# Altium schematic symbol library MicroProcessor.SchLib: 9 symbols (part 1 of 4)
Pins are listed as number, name and electrical type; pins without a type are passive.

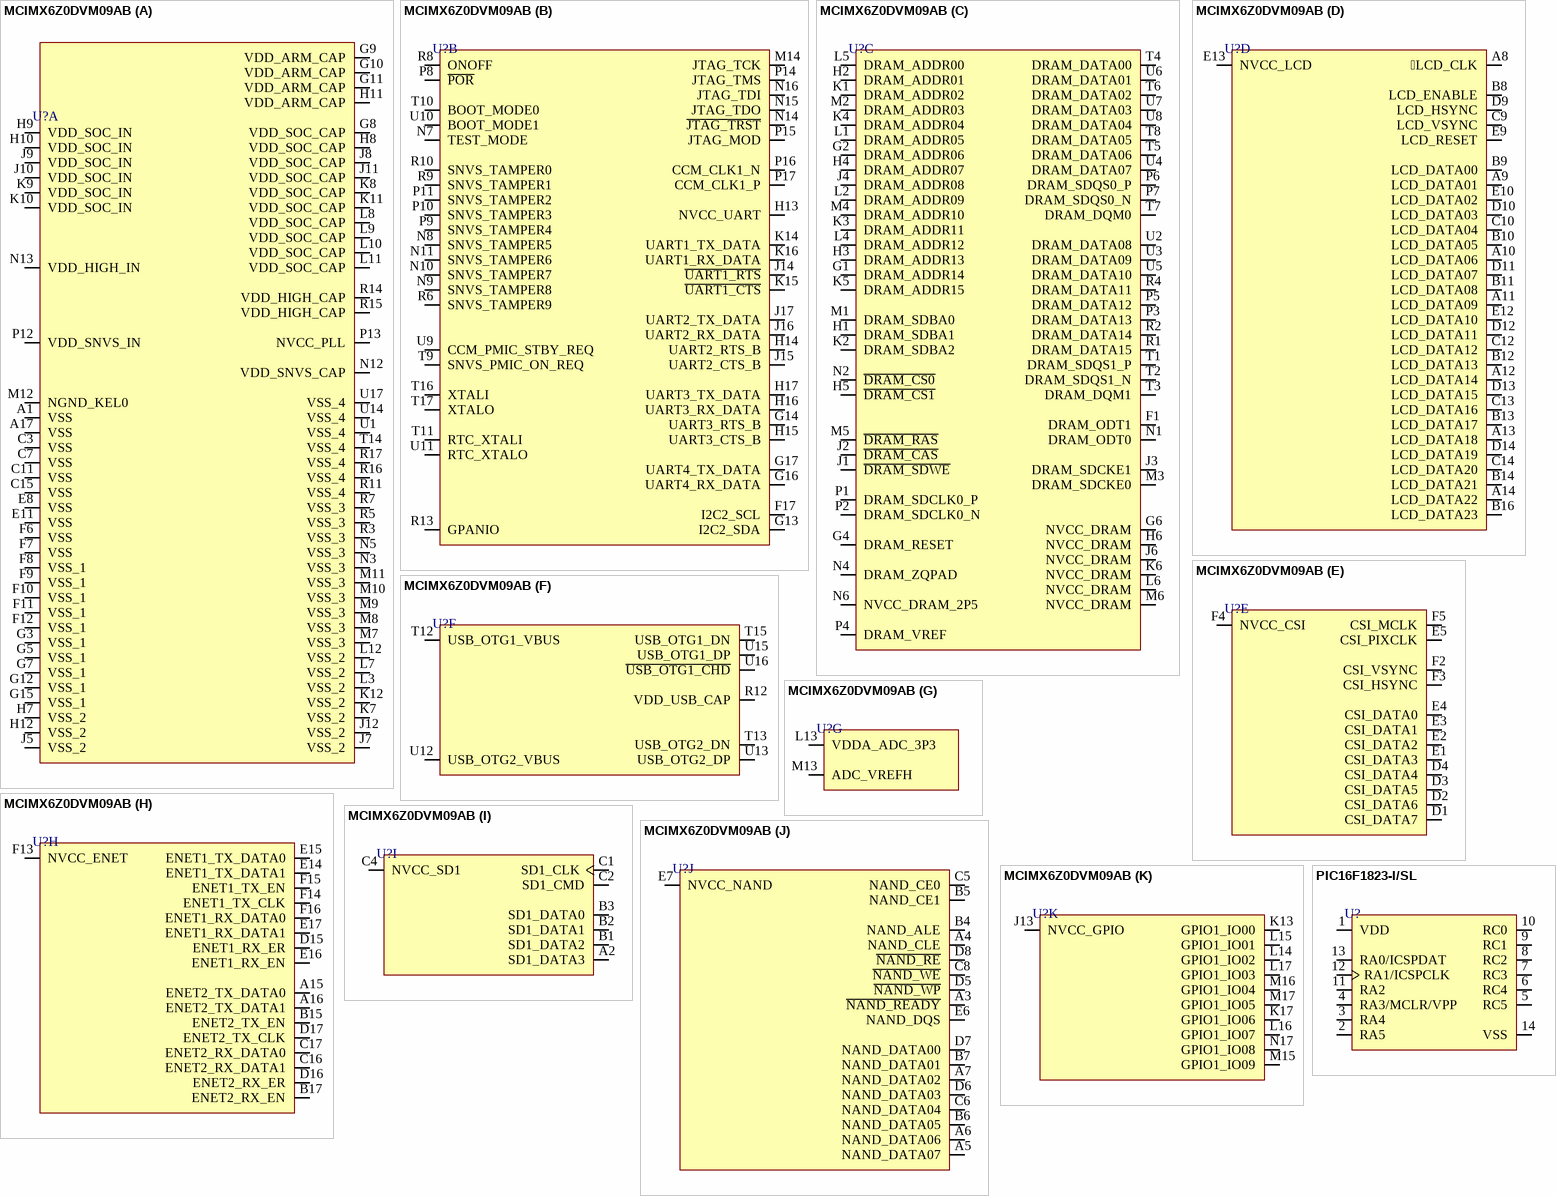
[diagram p0: symbols MCIMX6Z0DVM09AB to PIC16F1823-I/SL]

## MCIMX6Z0DVM09AB
designator U?
i.MX6ULZ, 289MAPBGA / TRAY TRAY MULTIPLE DP BAKEABLE RoHS Compliant: Yes; Manufacturer: NXP USA; Manufacturer Part Number: MCIMX6Z0DVM09AB; Core Architecture: ARM; Number of Cores: 1; Frequency: 900MHz; Supplier: Newark; Supplier Part Number: 81AC2573; RoHS: No; Category: Uncategorized; Case/Package: MAPBGA; Pins: 289; Min Operating Temperature: 0°C; Max Operating Temperature: 95°C; Packaging: Tray; ComponentLink1URL: https://www.nxp.com/docs/en/fact-sheet/IMXULZFS.pdf?src-supplier=Digi-Key; ComponentLink1Description: https://www.nxp.com/docs/en/fact-sheet/IMXULZFS.pdf?src-supplier=Digi-Key
footprint 289-MAPBGA (14x14)
part A pins: A1 VSS (power), A17 VSS (power), C3 VSS (power), C7 VSS (power), C11 VSS (power), C15 VSS (power), E8 VSS (power), E11 VSS (power), F6 VSS (power), F7 VSS (power), F8 VSS_1 (power), F9 VSS_1 (power), F10 VSS_1 (power), F11 VSS_1 (power), F12 VSS_1 (power), G3 VSS_1 (power), G5 VSS_1 (power), G7 VSS_1 (power), G8 VDD_SOC_CAP (power), G9 VDD_ARM_CAP (power), G10 VDD_ARM_CAP (power), G11 VDD_ARM_CAP (power), G12 VSS_1 (power), G15 VSS_1 (power), H7 VSS_2 (power), H8 VDD_SOC_CAP (power), H9 VDD_SOC_IN (power), H10 VDD_SOC_IN (power), H11 VDD_ARM_CAP (power), H12 VSS_2 (power), J5 VSS_2 (power), J7 VSS_2 (power), J8 VDD_SOC_CAP (power), J9 VDD_SOC_IN (power), J10 VDD_SOC_IN (power), J11 VDD_SOC_CAP (power), J12 VSS_2 (power), K7 VSS_2 (power), K8 VDD_SOC_CAP (power), K9 VDD_SOC_IN (power), K10 VDD_SOC_IN (power), K11 VDD_SOC_CAP (power), K12 VSS_2 (power), L3 VSS_2 (power), L7 VSS_2 (power), L8 VDD_SOC_CAP (power), L9 VDD_SOC_CAP (power), L10 VDD_SOC_CAP (power), L11 VDD_SOC_CAP (power), L12 VSS_2 (power), M7 VSS_3 (power), M8 VSS_3 (power), M9 VSS_3 (power), M10 VSS_3 (power), M11 VSS_3 (power), M12 NGND_KEL0, N3 VSS_3 (power), N5 VSS_3 (power), N12 VDD_SNVS_CAP (power), N13 VDD_HIGH_IN (power), P12 VDD_SNVS_IN (power), P13 NVCC_PLL, R3 VSS_3 (power), R5 VSS_3 (power), R7 VSS_3 (power), R11 VSS_4 (power), R14 VDD_HIGH_CAP (power), R15 VDD_HIGH_CAP (power), R16 VSS_4 (power), R17 VSS_4 (power), T14 VSS_4 (power), U1 VSS_4 (power), U14 VSS_4 (power), U17 VSS_4 (power)
part B pins: F17 I2C2_SCL, G13 I2C2_SDA, G14 UART3_RTS_B, G16 UART4_RX_DATA, G17 UART4_TX_DATA, H13 NVCC_UART, H14 UART2_RTS_B, H15 UART3_CTS_B, H16 UART3_RX_DATA, H17 UART3_TX_DATA, J14 ~{UART1_RTS}, J15 UART2_CTS_B, J16 UART2_RX_DATA, J17 UART2_TX_DATA, K14 UART1_TX_DATA, K15 ~{UART1_CTS}, K16 UART1_RX_DATA, M14 JTAG_TCK, N7 TEST_MODE, N8 SNVS_TAMPER5, N9 SNVS_TAMPER8, N10 SNVS_TAMPER7, N11 SNVS_TAMPER6, N14 ~{JTAG_TRST}, N15 JTAG_TDO, N16 JTAG_TDI, P8 ~{POR}, P9 SNVS_TAMPER4, P10 SNVS_TAMPER3, P11 SNVS_TAMPER2, P14 JTAG_TMS, P15 JTAG_MOD, P16 CCM_CLK1_N, P17 CCM_CLK1_P, R6 SNVS_TAMPER9, R8 ONOFF, R9 SNVS_TAMPER1, R10 SNVS_TAMPER0, R13 GPANIO, T9 SNVS_PMIC_ON_REQ, T10 BOOT_MODE0, T11 RTC_XTALI, T16 XTALI, T17 XTALO, U9 CCM_PMIC_STBY_REQ, U10 BOOT_MODE1, U11 RTC_XTALO
part C pins: F1 DRAM_ODT1, G1 DRAM_ADDR14, G2 DRAM_ADDR06, G4 DRAM_RESET, G6 NVCC_DRAM, H1 DRAM_SDBA1, H2 DRAM_ADDR01, H3 DRAM_ADDR13, H4 DRAM_ADDR07, H5 ~{DRAM_CS1}, H6 NVCC_DRAM, J1 ~{DRAM_SDWE}, J2 ~{DRAM_CAS}, J3 DRAM_SDCKE1, J4 DRAM_ADDR08, J6 NVCC_DRAM, K1 DRAM_ADDR02, K2 DRAM_SDBA2, K3 DRAM_ADDR11, K4 DRAM_ADDR04, K5 DRAM_ADDR15, K6 NVCC_DRAM, L1 DRAM_ADDR05, L2 DRAM_ADDR09, L4 DRAM_ADDR12, L5 DRAM_ADDR00, L6 NVCC_DRAM, M1 DRAM_SDBA0, M2 DRAM_ADDR03, M3 DRAM_SDCKE0, M4 DRAM_ADDR10, M5 ~{DRAM_RAS}, M6 NVCC_DRAM, N1 DRAM_ODT0, N2 ~{DRAM_CS0}, N4 DRAM_ZQPAD, N6 NVCC_DRAM_2P5, P1 DRAM_SDCLK0_P, P2 DRAM_SDCLK0_N, P3 DRAM_DATA13, P4 DRAM_VREF, P5 DRAM_DATA12, P6 DRAM_SDQS0_P, P7 DRAM_SDQS0_N, R1 DRAM_DATA15, R2 DRAM_DATA14, R4 DRAM_DATA11, T1 DRAM_SDQS1_P, T2 DRAM_SDQS1_N, T3 DRAM_DQM1, T4 DRAM_DATA00, T5 DRAM_DATA06, T6 DRAM_DATA02, T7 DRAM_DQM0, T8 DRAM_DATA05, U2 DRAM_DATA08, U3 DRAM_DATA09, U4 DRAM_DATA07, U5 DRAM_DATA10, U6 DRAM_DATA01, U7 DRAM_DATA03, U8 DRAM_DATA04
part D pins: A8 LCD_CLK, A9 LCD_DATA01, A10 LCD_DATA06, A11 LCD_DATA09, A12 LCD_DATA14, A13 LCD_DATA18, A14 LCD_DATA22, B8 LCD_ENABLE, B9 LCD_DATA00, B10 LCD_DATA05, B11 LCD_DATA08, B12 LCD_DATA13, B13 LCD_DATA17, B14 LCD_DATA21, B16 LCD_DATA23, C9 LCD_VSYNC, C10 LCD_DATA04, C12 LCD_DATA12, C13 LCD_DATA16, C14 LCD_DATA20, D9 LCD_HSYNC, D10 LCD_DATA03, D11 LCD_DATA07, D12 LCD_DATA11, D13 LCD_DATA15, D14 LCD_DATA19, E9 LCD_RESET, E10 LCD_DATA02, E12 LCD_DATA10, E13 NVCC_LCD
part E pins: D1 CSI_DATA7, D2 CSI_DATA6, D3 CSI_DATA5, D4 CSI_DATA4, E1 CSI_DATA3, E2 CSI_DATA2, E3 CSI_DATA1, E4 CSI_DATA0, E5 CSI_PIXCLK, F2 CSI_VSYNC, F3 CSI_HSYNC, F4 NVCC_CSI, F5 CSI_MCLK
part F pins: R12 VDD_USB_CAP (power), T12 USB_OTG1_VBUS, T13 USB_OTG2_DN, T15 USB_OTG1_DN, U12 USB_OTG2_VBUS, U13 USB_OTG2_DP, U15 USB_OTG1_DP, U16 ~{USB_OTG1_CHD}
part G pins: L13 VDDA_ADC_3P3 (power), M13 ADC_VREFH (power)
part H pins: A15 ENET2_TX_DATA0, A16 ENET2_TX_DATA1, B15 ENET2_TX_EN, B17 ENET2_RX_EN, C16 ENET2_RX_DATA1, C17 ENET2_RX_DATA0, D15 ENET1_RX_ER, D16 ENET2_RX_ER, D17 ENET2_TX_CLK, E14 ENET1_TX_DATA1, E15 ENET1_TX_DATA0, E16 ENET1_RX_EN, E17 ENET1_RX_DATA1, F13 NVCC_ENET, F14 ENET1_TX_CLK, F15 ENET1_TX_EN, F16 ENET1_RX_DATA0
part I pins: A2 SD1_DATA3, B1 SD1_DATA2, B2 SD1_DATA1, B3 SD1_DATA0, C1 SD1_CLK, C2 SD1_CMD, C4 NVCC_SD1
part J pins: A3 ~{NAND_READY}, A4 NAND_CLE, A5 NAND_DATA07, A6 NAND_DATA06, A7 NAND_DATA02, B4 NAND_ALE, B5 NAND_CE1, B6 NAND_DATA05, B7 NAND_DATA01, C5 NAND_CE0, C6 NAND_DATA04, C8 ~{NAND_WE}, D5 ~{NAND_WP}, D6 NAND_DATA03, D7 NAND_DATA00, D8 ~{NAND_RE}, E6 NAND_DQS, E7 NVCC_NAND
part K pins: J13 NVCC_GPIO, K13 GPIO1_IO00, K17 GPIO1_IO06, L14 GPIO1_IO02, L15 GPIO1_IO01, L16 GPIO1_IO07, L17 GPIO1_IO03, M15 GPIO1_IO09, M16 GPIO1_IO04, M17 GPIO1_IO05, N17 GPIO1_IO08

## PIC16F1823-I/SL
designator U?
IC MCU 8BIT 3.5KB FLASH 14SOIC; Manufacturer: Microchip; Manufacturer Part Number: PIC16F1823-I/SL; Item Type: Microprocessors; Supplier: Digikey; Supplier Part Number: PIC16F1823-I/SL-ND; RoHS: Yes; Stock: 47700; Pricing: 1=1.4, 25=1.28, 100=1.18 (USD); ComponentLink1URL: https://datasheet.ciiva.com/22671/1645109-22671365.pdf?src-supplier=Element14; ComponentLink1Description: https://datasheet.ciiva.com/22671/1645109-22671365.pdf?src-supplier=Element14; ComponentLink2URL: https://datasheet.ciiva.com/14132/pic12f1822-16f1823-eng-tds-14132380.pdf?src-supplier=Distrelec; ComponentLink2Description: https://datasheet.ciiva.com/14132/pic12f1822-16f1823-eng-tds-14132380.pdf?src-supplier=Distrelec; ComponentLink3URL: https://datasheet.ciiva.com/6641/41413c-6641949.pdf?src-supplier=Digikey; ComponentLink3Description: https://datasheet.ciiva.com/6641/41413c-6641949.pdf?src-supplier=Digikey; ComponentLink4URL: https://datasheet.ciiva.com/9229/41414d-9229034.pdf?src-supplier=Avnet; ComponentLink4Description: https://datasheet.ciiva.com/9229/41414d-9229034.pdf?src-supplier=Avnet; ComponentLink5URL: https://datasheet.ciiva.com/29331/651599-da-01-en-ic-mcu-pic16f1823-i-sl-soic-14-mcp-29331420.pdf?src-supplier=Conrad; ComponentLink5Description: https://datasheet.ciiva.com/29331/651599-da-01-en-ic-mcu-pic16f1823-i-sl-soic-14-mcp-29331420.pdf?src-supplier=Conrad
footprint SOIC-14
pins: 1 VDD, 2 RA5, 3 RA4, 4 RA3/MCLR/VPP, 5 RC5, 6 RC4, 7 RC3, 8 RC2, 9 RC1, 10 RC0, 11 RA2, 12 RA1/ICSPCLK, 13 RA0/ICSPDAT, 14 VSS

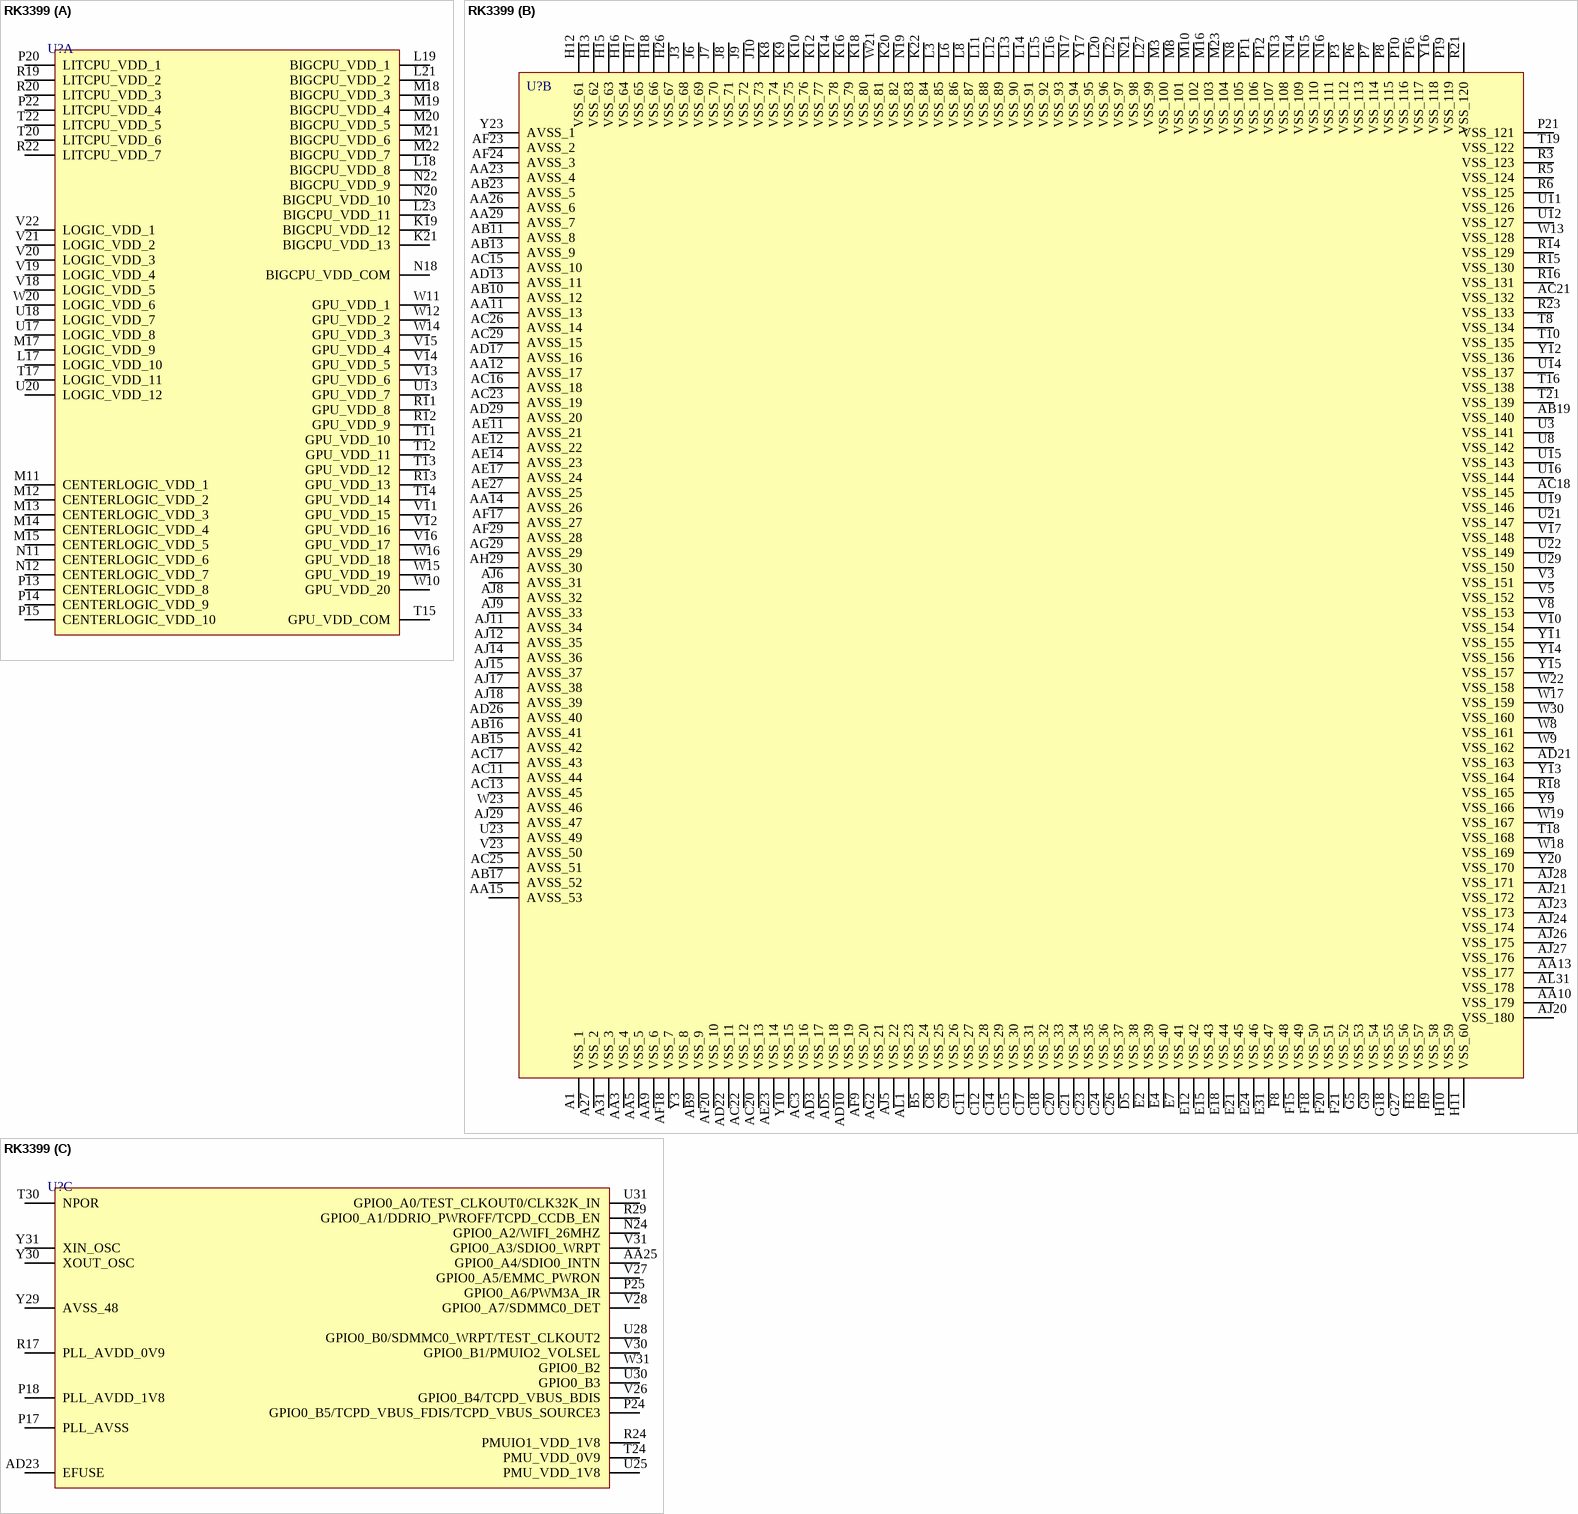
[diagram p1: symbol RK3399]

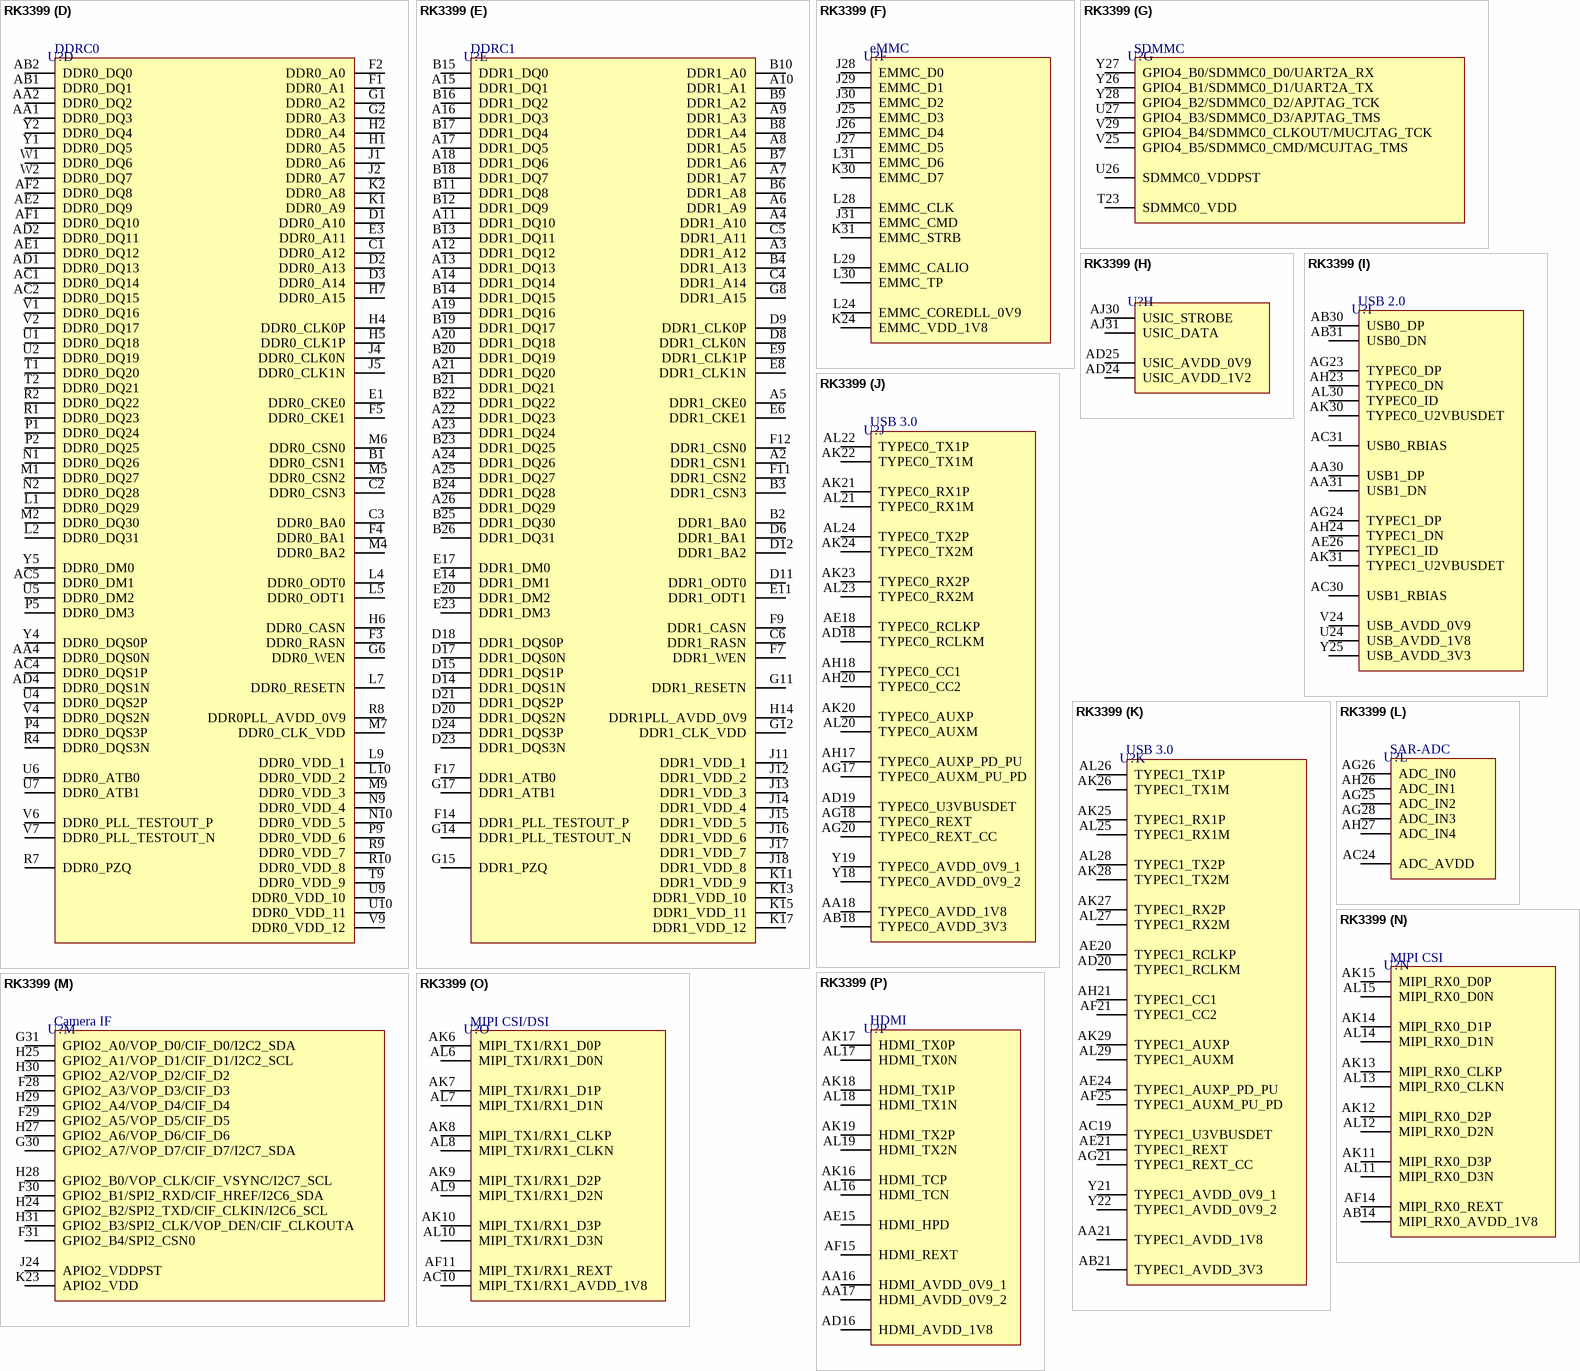
[diagram p2: symbol RK3399]

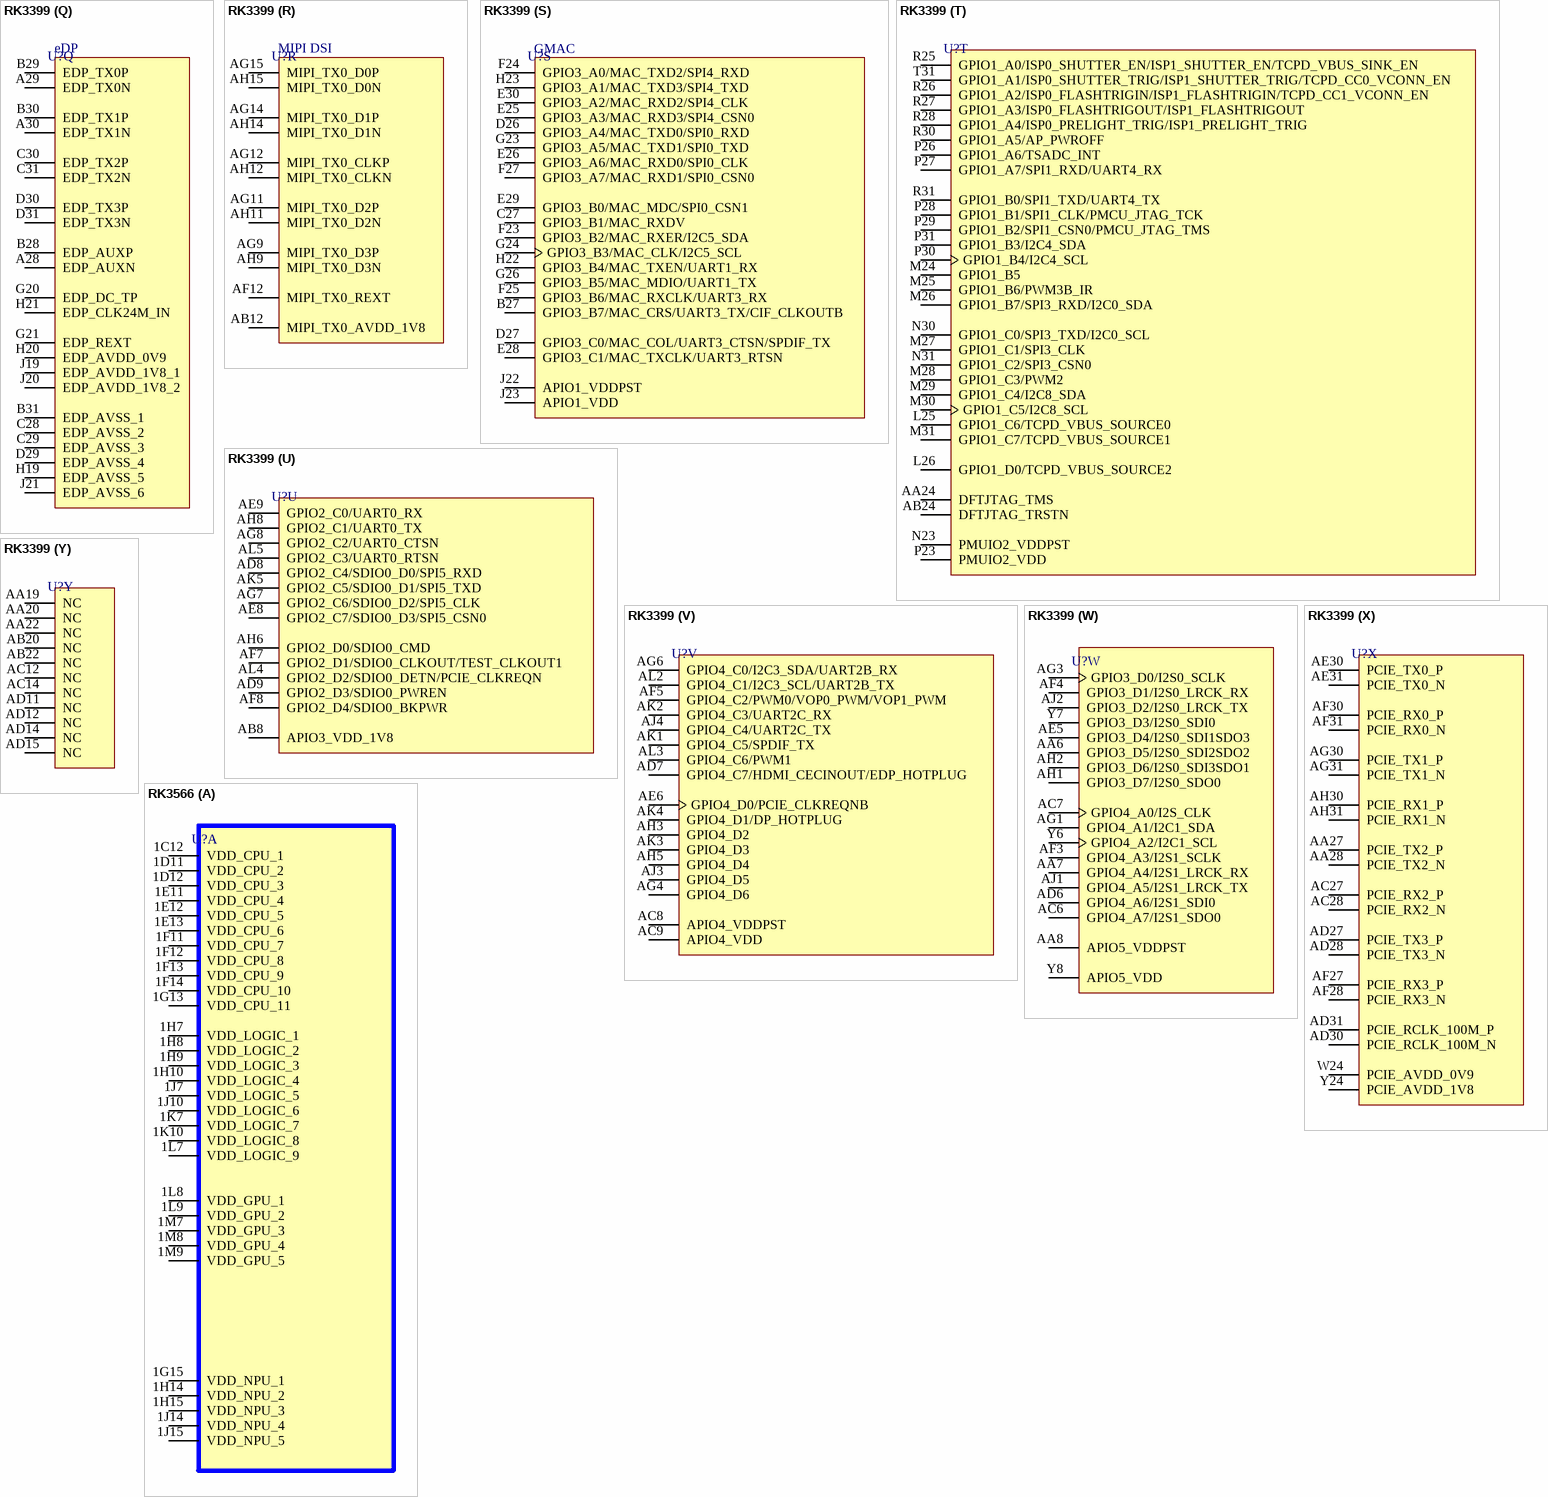
[diagram p3: symbols RK3399 to RK3566]

## RK3399
designator U?
RK3399 CPU BGA for HD set-top box chip BGA Chipset; Manufacturer: Fuzhou Rockchip Electronics; ComponentLink1Description: Aliexpress; ComponentLink1URL: https://www.aliexpress.com/item/1005001971093459.html?spm=a2g0n.productlist.0.0.3c7csv8Qsv8Quh&browser_id=3ac7e9efb8074641aaabc4d871f09748&aff_trace_key=&aff_platform=msite&m_page_id=181389a08711fc2600d8cc522bab8d702dd4189be0&gclid=&pdp_npi=2%40dis%21USD%21%2123.6%21%21%21%21%21%402101d91e16545120399167831e8b89%21%21sea&algo_pvid=4303aedd-774c-4013-953d-920f10b55003; Manufacturer Part Number: RK3399; Footprint: FCBGA828
footprint FCBGA828 (21x21)
part A pins: K19 BIGCPU_VDD_12, K21 BIGCPU_VDD_13, L17 LOGIC_VDD_10 (power), L18 BIGCPU_VDD_8, L19 BIGCPU_VDD_1, L21 BIGCPU_VDD_2, L23 BIGCPU_VDD_11, M11 CENTERLOGIC_VDD_1 (power), M12 CENTERLOGIC_VDD_2 (power), M13 CENTERLOGIC_VDD_3 (power), M14 CENTERLOGIC_VDD_4 (power), M15 CENTERLOGIC_VDD_5 (power), M17 LOGIC_VDD_9 (power), M18 BIGCPU_VDD_3, M19 BIGCPU_VDD_4, M20 BIGCPU_VDD_5, M21 BIGCPU_VDD_6, M22 BIGCPU_VDD_7, N11 CENTERLOGIC_VDD_6 (power), N12 CENTERLOGIC_VDD_7 (power), N18 BIGCPU_VDD_COM, N20 BIGCPU_VDD_10, N22 BIGCPU_VDD_9, P13 CENTERLOGIC_VDD_8 (power), P14 CENTERLOGIC_VDD_9 (power), P15 CENTERLOGIC_VDD_10 (power), P20 LITCPU_VDD_1 (power), P22 LITCPU_VDD_4 (power), R11 GPU_VDD_8, R12 GPU_VDD_9, R13 GPU_VDD_13, R19 LITCPU_VDD_2 (power), R20 LITCPU_VDD_3 (power), R22 LITCPU_VDD_7 (power), T11 GPU_VDD_10, T12 GPU_VDD_11, T13 GPU_VDD_12, T14 GPU_VDD_14, T15 GPU_VDD_COM, T17 LOGIC_VDD_11 (power), T20 LITCPU_VDD_6 (power), T22 LITCPU_VDD_5 (power), U13 GPU_VDD_7, U17 LOGIC_VDD_8 (power), U18 LOGIC_VDD_7 (power), U20 LOGIC_VDD_12 (power), V11 GPU_VDD_15, V12 GPU_VDD_16, V13 GPU_VDD_6, V14 GPU_VDD_5, V15 GPU_VDD_4, V16 GPU_VDD_17, V18 LOGIC_VDD_5 (power), V19 LOGIC_VDD_4 (power), V20 LOGIC_VDD_3 (power), V21 LOGIC_VDD_2 (power), V22 LOGIC_VDD_1 (power), W10 GPU_VDD_20, W11 GPU_VDD_1, W12 GPU_VDD_2, W14 GPU_VDD_3, W15 GPU_VDD_19, W16 GPU_VDD_18, W20 LOGIC_VDD_6 (power)
part B pins: A1 VSS_1 (power), A27 VSS_2 (power), A31 VSS_3 (power), AA3 VSS_4 (power), AA5 VSS_5 (power), AA9 VSS_6 (power), AA10 VSS_179 (power), AA11 AVSS_13, AA12 AVSS_17, AA13 VSS_177 (power), AA14 AVSS_26, AA15 AVSS_53, AA23 AVSS_4, AA26 AVSS_6, AA29 AVSS_7, AB9 VSS_9 (power), AB10 AVSS_12, AB11 AVSS_8, AB13 AVSS_9, AB15 AVSS_42, AB16 AVSS_41, AB17 AVSS_52, AB19 VSS_140 (power), AB23 AVSS_5, AC3 VSS_16 (power), AC11 AVSS_44, AC13 AVSS_45, AC15 AVSS_10, AC16 AVSS_18, AC17 AVSS_43, AC18 VSS_145 (power), AC20 VSS_13 (power), AC21 VSS_132 (power), AC22 VSS_12 (power), AC23 AVSS_19, AC25 AVSS_51, AC26 AVSS_14, AC29 AVSS_15, AD3 VSS_17 (power), AD5 VSS_18 (power), AD10 VSS_19 (power), AD13 AVSS_11, AD17 AVSS_16, AD21 VSS_163 (power), AD22 VSS_11 (power), AD26 AVSS_40, AD29 AVSS_20, AE11 AVSS_21, AE12 AVSS_22, AE14 AVSS_23, AE17 AVSS_24, AE23 VSS_14 (power), AE27 AVSS_25, AF9 VSS_20 (power), AF17 AVSS_27, AF18 VSS_7 (power), AF20 VSS_10 (power), AF23 AVSS_2, AF24 AVSS_3, AF29 AVSS_28, AG2 VSS_21 (power), AG29 AVSS_29, AH29 AVSS_30, AJ5 VSS_22 (power), AJ6 AVSS_31, AJ8 AVSS_32, AJ9 AVSS_33, AJ11 AVSS_34, AJ12 AVSS_35, AJ14 AVSS_36, AJ15 AVSS_37, AJ17 AVSS_38, AJ18 AVSS_39, AJ20 VSS_180 (power), AJ21 VSS_172 (power), AJ23 VSS_173 (power), AJ24 VSS_174 (power), AJ26 VSS_175 (power), AJ27 VSS_176 (power), AJ28 VSS_171 (power), AJ29 AVSS_47, AL1 VSS_23 (power), AL31 VSS_178 (power), B5 VSS_24 (power), C8 VSS_25 (power), C9 VSS_26 (power), C11 VSS_27 (power), C12 VSS_28 (power), C14 VSS_29 (power), C15 VSS_30 (power), C17 VSS_31 (power), C18 VSS_32 (power), C20 VSS_33 (power), C21 VSS_34 (power), C23 VSS_35 (power), C24 VSS_36 (power), C26 VSS_37 (power), D5 VSS_38 (power), E2 VSS_39 (power), E4 VSS_40 (power), E7 VSS_41 (power), E12 VSS_42 (power), E15 VSS_43 (power), E18 VSS_44 (power), E21 VSS_45 (power), E24 VSS_46 (power), E31 VSS_47 (power), F8 VSS_48 (power), F15 VSS_49 (power), F18 VSS_50 (power), F20 VSS_51 (power), F21 VSS_52 (power), G5 VSS_53 (power), G9 VSS_54 (power), G18 VSS_55 (power), G27 VSS_56 (power), H3 VSS_57 (power), H9 VSS_58 (power), H10 VSS_59 (power), H11 VSS_60 (power), H12 VSS_61 (power), H13 VSS_62 (power), H15 VSS_63 (power), H16 VSS_64 (power), H17 VSS_65 (power), H18 VSS_66 (power), H26 VSS_67 (power), J3 VSS_68 (power), J6 VSS_69 (power), J7 VSS_70 (power), J8 VSS_71 (power), J9 VSS_72 (power), J10 VSS_73 (power), K8 VSS_74 (power), K9 VSS_75 (power), K10 VSS_76 (power), K12 VSS_77 (power), K14 VSS_78 (power), K16 VSS_79 (power), K18 VSS_80 (power), K20 VSS_82 (power), K22 VSS_84 (power), L3 VSS_85 (power), L6 VSS_86 (power), L8 VSS_87 (power), L11 VSS_88 (power), L12 VSS_89 (power), L13 VSS_90 (power), L14 VSS_91 (power), L15 VSS_92 (power), L16 VSS_93 (power), L20 VSS_96 (power), L22 VSS_97 (power), L27 VSS_99 (power), M3 VSS_100 (power), M8 VSS_101 (power), M10 VSS_102 (power), M16 VSS_103 (power), M23 VSS_104 (power), N8 VSS_105 (power), N13 VSS_108 (power), N14 VSS_109 (power), N15 VSS_110 (power), N16 VSS_111 (power), N17 VSS_94 (power), N19 VSS_83 (power), N21 VSS_98 (power), P3 VSS_112 (power), P6 VSS_113 (power), P7 VSS_114 (power), P8 VSS_115 (power), P10 VSS_116 (power), P11 VSS_106 (power), P12 VSS_107 (power), P16 VSS_117 (power), P19 VSS_119 (power), P21 VSS_121 (power), R3 VSS_123 (power), R5 VSS_124 (power), R6 VSS_125 (power), R14 VSS_129 (power), R15 VSS_130 (power), R16 VSS_131 (power), R18 VSS_165 (power), R21 VSS_120 (power), R23 VSS_133 (power), T8 VSS_134 (power), T10 VSS_135 (power), T16 VSS_138 (power), T18 VSS_168 (power), T19 VSS_122 (power), T21 VSS_139 (power), U3 VSS_141 (power), U8 VSS_142 (power), U11 VSS_126 (power), U12 VSS_127 (power), U14 VSS_137 (power), U15 VSS_143 (power), U16 VSS_144 (power), U19 VSS_146 (power), U21 VSS_147 (power), U22 VSS_149 (power), U23 AVSS_49, U29 VSS_150 (power), V3 VSS_151 (power), V5 VSS_152 (power), V8 VSS_153 (power), V10 VSS_154 (power), V17 VSS_148 (power), V23 AVSS_50, W8 VSS_161 (power), W9 VSS_162 (power), W13 VSS_128 (power), W17 VSS_159 (power), W18 VSS_169 (power), W19 VSS_167 (power), W21 VSS_81 (power), W22 VSS_158 (power), W23 AVSS_46, W30 VSS_160 (power), Y3 VSS_8 (power), Y9 VSS_166 (power), Y10 VSS_15 (power), Y11 VSS_155 (power), Y12 VSS_136 (power), Y13 VSS_164 (power), Y14 VSS_156 (power), Y15 VSS_157 (power), Y16 VSS_118 (power), Y17 VSS_95 (power), Y20 VSS_170 (power), Y23 AVSS_1
part C pins: AA25 GPIO0_A4/SDIO0_INTN, AD23 EFUSE, N24 GPIO0_A2/WIFI_26MHZ, P17 PLL_AVSS, P18 PLL_AVDD_1V8, P24 GPIO0_B5/TCPD_VBUS_FDIS/TCPD_VBUS_SOURCE3, P25 GPIO0_A6/PWM3A_IR, R17 PLL_AVDD_0V9, R24 PMUIO1_VDD_1V8, R29 GPIO0_A1/DDRIO_PWROFF/TCPD_CCDB_EN, T24 PMU_VDD_0V9, T30 NPOR, U25 PMU_VDD_1V8, U28 GPIO0_B0/SDMMC0_WRPT/TEST_CLKOUT2, U30 GPIO0_B3, U31 GPIO0_A0/TEST_CLKOUT0/CLK32K_IN, V26 GPIO0_B4/TCPD_VBUS_BDIS, V27 GPIO0_A5/EMMC_PWRON, V28 GPIO0_A7/SDMMC0_DET, V30 GPIO0_B1/PMUIO2_VOLSEL, V31 GPIO0_A3/SDIO0_WRPT, W31 GPIO0_B2, Y29 AVSS_48, Y30 XOUT_OSC, Y31 XIN_OSC
part D pins: AA1 DDR0_DQ3, AA2 DDR0_DQ2, AA4 DDR0_DQS0N, AB1 DDR0_DQ1, AB2 DDR0_DQ0, AC1 DDR0_DQ14, AC2 DDR0_DQ15, AC4 DDR0_DQS1P, AC5 DDR0_DM1, AD1 DDR0_DQ13, AD2 DDR0_DQ11, AD4 DDR0_DQS1N, AE1 DDR0_DQ12, AE2 DDR0_DQ9, AF1 DDR0_DQ10, AF2 DDR0_DQ8, B1 DDR0_CSN1, C1 DDR0_A12, C2 DDR0_CSN3, C3 DDR0_BA0, D1 DDR0_A10, D2 DDR0_A13, D3 DDR0_A14, E1 DDR0_CKE0, E3 DDR0_A11, F1 DDR0_A1, F2 DDR0_A0, F3 DDR0_RASN, F4 DDR0_BA1, F5 DDR0_CKE1, G1 DDR0_A2, G2 DDR0_A3, G6 DDR0_WEN, H1 DDR0_A5, H2 DDR0_A4, H4 DDR0_CLK0P, H5 DDR0_CLK1P, H6 DDR0_CASN, H7 DDR0_A15, J1 DDR0_A6, J2 DDR0_A7, J4 DDR0_CLK0N, J5 DDR0_CLK1N, K1 DDR0_A9, K2 DDR0_A8, L1 DDR0_DQ29, L2 DDR0_DQ31, L4 DDR0_ODT0, L5 DDR0_ODT1, L7 DDR0_RESETN, L9 DDR0_VDD_1, L10 DDR0_VDD_2, M1 DDR0_DQ27, M2 DDR0_DQ30, M4 DDR0_BA2, M5 DDR0_CSN2, M6 DDR0_CSN0, M7 DDR0_CLK_VDD, M9 DDR0_VDD_3, N1 DDR0_DQ26, N2 DDR0_DQ28, N9 DDR0_VDD_4, N10 DDR0_VDD_5, P1 DDR0_DQ24, P2 DDR0_DQ25, P4 DDR0_DQS3P, P5 DDR0_DM3, P9 DDR0_VDD_6, R1 DDR0_DQ23, R2 DDR0_DQ22, R4 DDR0_DQS3N, R7 DDR0_PZQ, R8 DDR0PLL_AVDD_0V9, R9 DDR0_VDD_7, R10 DDR0_VDD_8, T1 DDR0_DQ20, T2 DDR0_DQ21, T9 DDR0_VDD_9, U1 DDR0_DQ18, U2 DDR0_DQ19, U4 DDR0_DQS2P, U5 DDR0_DM2, U6 DDR0_ATB0, U7 DDR0_ATB1, U9 DDR0_VDD_10, U10 DDR0_VDD_11, V1 DDR0_DQ16, V2 DDR0_DQ17, V4 DDR0_DQS2N, V6 DDR0_PLL_TESTOUT_P, V7 DDR0_PLL_TESTOUT_N, V9 DDR0_VDD_12, W1 DDR0_DQ6, W2 DDR0_DQ7, Y1 DDR0_DQ5, Y2 DDR0_DQ4, Y4 DDR0_DQS0P, Y5 DDR0_DM0
part E pins: A2 DDR1_CSN1, A3 DDR1_A12, A4 DDR1_A10, A5 DDR1_CKE0, A6 DDR1_A9, A7 DDR1_A7, A8 DDR1_A5, A9 DDR1_A3, A10 DDR1_A1, A11 DDR1_DQ10, A12 DDR1_DQ12, A13 DDR1_DQ13, A14 DDR1_DQ14, A15 DDR1_DQ1, A16 DDR1_DQ3, A17 DDR1_DQ5, A18 DDR1_DQ6, A19 DDR1_DQ16, A20 DDR1_DQ18, A21 DDR1_DQ20, A22 DDR1_DQ23, A23 DDR1_DQ24, A24 DDR1_DQ26, A25 DDR1_DQ27, A26 DDR1_DQ29, B2 DDR1_BA0, B3 DDR1_CSN3, B4 DDR1_A13, B6 DDR1_A8, B7 DDR1_A6, B8 DDR1_A4, B9 DDR1_A2, B10 DDR1_A0, B11 DDR1_DQ8, B12 DDR1_DQ9, B13 DDR1_DQ11, B14 DDR1_DQ15, B15 DDR1_DQ0, B16 DDR1_DQ2, B17 DDR1_DQ4, B18 DDR1_DQ7, B19 DDR1_DQ17, B20 DDR1_DQ19, B21 DDR1_DQ21, B22 DDR1_DQ22, B23 DDR1_DQ25, B24 DDR1_DQ28, B25 DDR1_DQ30, B26 DDR1_DQ31, C4 DDR1_A14, C5 DDR1_A11, C6 DDR1_RASN, D6 DDR1_BA1, D8 DDR1_CLK0N, D9 DDR1_CLK0P, D11 DDR1_ODT0, D12 DDR1_BA2, D14 DDR1_DQS1N, D15 DDR1_DQS1P, D17 DDR1_DQS0N, D18 DDR1_DQS0P, D20 DDR1_DQS2N, D21 DDR1_DQS2P, D23 DDR1_DQS3N, D24 DDR1_DQS3P, E6 DDR1_CKE1, E8 DDR1_CLK1N, E9 DDR1_CLK1P, E11 DDR1_ODT1, E14 DDR1_DM1, E17 DDR1_DM0, E20 DDR1_DM2, E23 DDR1_DM3, F7 DDR1_WEN, F9 DDR1_CASN, F11 DDR1_CSN2, F12 DDR1_CSN0, F14 DDR1_PLL_TESTOUT_P, F17 DDR1_ATB0, G8 DDR1_A15, G11 DDR1_RESETN, G12 DDR1_CLK_VDD, G14 DDR1_PLL_TESTOUT_N, G15 DDR1_PZQ, G17 DDR1_ATB1, H14 DDR1PLL_AVDD_0V9, J11 DDR1_VDD_1, J12 DDR1_VDD_2, J13 DDR1_VDD_3, J14 DDR1_VDD_4, J15 DDR1_VDD_5, J16 DDR1_VDD_6, J17 DDR1_VDD_7, J18 DDR1_VDD_8, K11 DDR1_VDD_9, K13 DDR1_VDD_10, K15 DDR1_VDD_11, K17 DDR1_VDD_12
part F pins: J25 EMMC_D3, J26 EMMC_D4, J27 EMMC_D5, J28 EMMC_D0, J29 EMMC_D1, J30 EMMC_D2, J31 EMMC_CMD, K24 EMMC_VDD_1V8, K30 EMMC_D7, K31 EMMC_STRB, L24 EMMC_COREDLL_0V9, L28 EMMC_CLK, L29 EMMC_CALIO, L30 EMMC_TP, L31 EMMC_D6
part G pins: T23 SDMMC0_VDD, U26 SDMMC0_VDDPST, U27 GPIO4_B3/SDMMC0_D3/APJTAG_TMS, V25 GPIO4_B5/SDMMC0_CMD/MCUJTAG_TMS, V29 GPIO4_B4/SDMMC0_CLKOUT/MUCJTAG_TCK, Y26 GPIO4_B1/SDMMC0_D1/UART2A_TX, Y27 GPIO4_B0/SDMMC0_D0/UART2A_RX, Y28 GPIO4_B2/SDMMC0_D2/APJTAG_TCK
part H pins: AD24 USIC_AVDD_1V2, AD25 USIC_AVDD_0V9, AJ30 USIC_STROBE, AJ31 USIC_DATA
part I pins: AA30 USB1_DP, AA31 USB1_DN, AB30 USB0_DP, AB31 USB0_DN, AC30 USB1_RBIAS, AC31 USB0_RBIAS, AE26 TYPEC1_ID, AG23 TYPEC0_DP, AG24 TYPEC1_DP, AH23 TYPEC0_DN, AH24 TYPEC1_DN, AK30 TYPEC0_U2VBUSDET, AK31 TYPEC1_U2VBUSDET, AL30 TYPEC0_ID, U24 USB_AVDD_1V8, V24 USB_AVDD_0V9, Y25 USB_AVDD_3V3
part J pins: AA18 TYPEC0_AVDD_1V8, AB18 TYPEC0_AVDD_3V3, AD18 TYPEC0_RCLKM, AD19 TYPEC0_U3VBUSDET, AE18 TYPEC0_RCLKP, AG17 TYPEC0_AUXM_PU_PD, AG18 TYPEC0_REXT, AG20 TYPEC0_REXT_CC, AH17 TYPEC0_AUXP_PD_PU, AH18 TYPEC0_CC1, AH20 TYPEC0_CC2, AK20 TYPEC0_AUXP, AK21 TYPEC0_RX1P, AK22 TYPEC0_TX1M, AK23 TYPEC0_RX2P, AK24 TYPEC0_TX2M, AL20 TYPEC0_AUXM, AL21 TYPEC0_RX1M, AL22 TYPEC0_TX1P, AL23 TYPEC0_RX2M, AL24 TYPEC0_TX2P, Y18 TYPEC0_AVDD_0V9_2, Y19 TYPEC0_AVDD_0V9_1
part K pins: AA21 TYPEC1_AVDD_1V8, AB21 TYPEC1_AVDD_3V3, AC19 TYPEC1_U3VBUSDET, AD20 TYPEC1_RCLKM, AE20 TYPEC1_RCLKP, AE21 TYPEC1_REXT, AE24 TYPEC1_AUXP_PD_PU, AF21 TYPEC1_CC2, AF25 TYPEC1_AUXM_PU_PD, AG21 TYPEC1_REXT_CC, AH21 TYPEC1_CC1, AK25 TYPEC1_RX1P, AK26 TYPEC1_TX1M, AK27 TYPEC1_RX2P, AK28 TYPEC1_TX2M, AK29 TYPEC1_AUXP, AL25 TYPEC1_RX1M, AL26 TYPEC1_TX1P, AL27 TYPEC1_RX2M, AL28 TYPEC1_TX2P, AL29 TYPEC1_AUXM, Y21 TYPEC1_AVDD_0V9_1, Y22 TYPEC1_AVDD_0V9_2
part L pins: AC24 ADC_AVDD, AG25 ADC_IN2, AG26 ADC_IN0, AG28 ADC_IN3, AH26 ADC_IN1, AH27 ADC_IN4
part M pins: F28 GPIO2_A3/VOP_D3/CIF_D3, F29 GPIO2_A5/VOP_D5/CIF_D5, F30 GPIO2_B1/SPI2_RXD/CIF_HREF/I2C6_SDA, F31 GPIO2_B4/SPI2_CSN0, G30 GPIO2_A7/VOP_D7/CIF_D7/I2C7_SDA, G31 GPIO2_A0/VOP_D0/CIF_D0/I2C2_SDA, H24 GPIO2_B2/SPI2_TXD/CIF_CLKIN/I2C6_SCL, H25 GPIO2_A1/VOP_D1/CIF_D1/I2C2_SCL, H27 GPIO2_A6/VOP_D6/CIF_D6, H28 GPIO2_B0/VOP_CLK/CIF_VSYNC/I2C7_SCL, H29 GPIO2_A4/VOP_D4/CIF_D4, H30 GPIO2_A2/VOP_D2/CIF_D2, H31 GPIO2_B3/SPI2_CLK/VOP_DEN/CIF_CLKOUTA, J24 APIO2_VDDPST, K23 APIO2_VDD
part N pins: AB14 MIPI_RX0_AVDD_1V8, AF14 MIPI_RX0_REXT, AK11 MIPI_RX0_D3P, AK12 MIPI_RX0_D2P, AK13 MIPI_RX0_CLKP, AK14 MIPI_RX0_D1P, AK15 MIPI_RX0_D0P, AL11 MIPI_RX0_D3N, AL12 MIPI_RX0_D2N, AL13 MIPI_RX0_CLKN, AL14 MIPI_RX0_D1N, AL15 MIPI_RX0_D0N
part O pins: AC10 MIPI_TX1/RX1_AVDD_1V8, AF11 MIPI_TX1/RX1_REXT, AK6 MIPI_TX1/RX1_D0P, AK7 MIPI_TX1/RX1_D1P, AK8 MIPI_TX1/RX1_CLKP, AK9 MIPI_TX1/RX1_D2P, AK10 MIPI_TX1/RX1_D3P, AL6 MIPI_TX1/RX1_D0N, AL7 MIPI_TX1/RX1_D1N, AL8 MIPI_TX1/RX1_CLKN, AL9 MIPI_TX1/RX1_D2N, AL10 MIPI_TX1/RX1_D3N
part P pins: AA16 HDMI_AVDD_0V9_1, AA17 HDMI_AVDD_0V9_2, AD16 HDMI_AVDD_1V8, AE15 HDMI_HPD, AF15 HDMI_REXT, AK16 HDMI_TCP, AK17 HDMI_TX0P, AK18 HDMI_TX1P, AK19 HDMI_TX2P, AL16 HDMI_TCN, AL17 HDMI_TX0N, AL18 HDMI_TX1N, AL19 HDMI_TX2N
part Q pins: A28 EDP_AUXN, A29 EDP_TX0N, A30 EDP_TX1N, B28 EDP_AUXP, B29 EDP_TX0P, B30 EDP_TX1P, B31 EDP_AVSS_1, C28 EDP_AVSS_2, C29 EDP_AVSS_3, C30 EDP_TX2P, C31 EDP_TX2N, D29 EDP_AVSS_4, D30 EDP_TX3P, D31 EDP_TX3N, G20 EDP_DC_TP, G21 EDP_REXT, H19 EDP_AVSS_5, H20 EDP_AVDD_0V9, H21 EDP_CLK24M_IN, J19 EDP_AVDD_1V8_1, J20 EDP_AVDD_1V8_2, J21 EDP_AVSS_6
part R pins: AB12 MIPI_TX0_AVDD_1V8, AF12 MIPI_TX0_REXT, AG9 MIPI_TX0_D3P, AG11 MIPI_TX0_D2P, AG12 MIPI_TX0_CLKP, AG14 MIPI_TX0_D1P, AG15 MIPI_TX0_D0P, AH9 MIPI_TX0_D3N, AH11 MIPI_TX0_D2N, AH12 MIPI_TX0_CLKN, AH14 MIPI_TX0_D1N, AH15 MIPI_TX0_D0N
part S pins: B27 GPIO3_B7/MAC_CRS/UART3_TX/CIF_CLKOUTB, C27 GPIO3_B1/MAC_RXDV, D26 GPIO3_A4/MAC_TXD0/SPI0_RXD, D27 GPIO3_C0/MAC_COL/UART3_CTSN/SPDIF_TX, E25 GPIO3_A3/MAC_RXD3/SPI4_CSN0, E26 GPIO3_A6/MAC_RXD0/SPI0_CLK, E28 GPIO3_C1/MAC_TXCLK/UART3_RTSN, E29 GPIO3_B0/MAC_MDC/SPI0_CSN1, E30 GPIO3_A2/MAC_RXD2/SPI4_CLK, F23 GPIO3_B2/MAC_RXER/I2C5_SDA, F24 GPIO3_A0/MAC_TXD2/SPI4_RXD, F25 GPIO3_B6/MAC_RXCLK/UART3_RX, F27 GPIO3_A7/MAC_RXD1/SPI0_CSN0, G23 GPIO3_A5/MAC_TXD1/SPI0_TXD, G24 GPIO3_B3/MAC_CLK/I2C5_SCL, G26 GPIO3_B5/MAC_MDIO/UART1_TX, H22 GPIO3_B4/MAC_TXEN/UART1_RX, H23 GPIO3_A1/MAC_TXD3/SPI4_TXD, J22 APIO1_VDDPST, J23 APIO1_VDD
part T pins: AA24 DFTJTAG_TMS, AB24 DFTJTAG_TRSTN, L25 GPIO1_C6/TCPD_VBUS_SOURCE0, L26 GPIO1_D0/TCPD_VBUS_SOURCE2, M24 GPIO1_B5, M25 GPIO1_B6/PWM3B_IR, M26 GPIO1_B7/SPI3_RXD/I2C0_SDA, M27 GPIO1_C1/SPI3_CLK, M28 GPIO1_C3/PWM2, M29 GPIO1_C4/I2C8_SDA, M30 GPIO1_C5/I2C8_SCL, M31 GPIO1_C7/TCPD_VBUS_SOURCE1, N23 PMUIO2_VDDPST, N30 GPIO1_C0/SPI3_TXD/I2C0_SCL, N31 GPIO1_C2/SPI3_CSN0, P23 PMUIO2_VDD, P26 GPIO1_A6/TSADC_INT, P27 GPIO1_A7/SPI1_RXD/UART4_RX, P28 GPIO1_B1/SPI1_CLK/PMCU_JTAG_TCK, P29 GPIO1_B2/SPI1_CSN0/PMCU_JTAG_TMS, P30 GPIO1_B4/I2C4_SCL, P31 GPIO1_B3/I2C4_SDA, R25 GPIO1_A0/ISP0_SHUTTER_EN/ISP1_SHUTTER_EN/TCPD_VBUS_SINK_EN, R26 GPIO1_A2/ISP0_FLASHTRIGIN/ISP1_FLASHTRIGIN/TCPD_CC1_VCONN_EN, R27 GPIO1_A3/ISP0_FLASHTRIGOUT/ISP1_FLASHTRIGOUT, R28 GPIO1_A4/ISP0_PRELIGHT_TRIG/ISP1_PRELIGHT_TRIG, R30 GPIO1_A5/AP_PWROFF, R31 GPIO1_B0/SPI1_TXD/UART4_TX, T31 GPIO1_A1/ISP0_SHUTTER_TRIG/ISP1_SHUTTER_TRIG/TCPD_CC0_VCONN_EN
part U pins: AB8 APIO3_VDD_1V8, AD8 GPIO2_C4/SDIO0_D0/SPI5_RXD, AD9 GPIO2_D3/SDIO0_PWREN, AE8 GPIO2_C7/SDIO0_D3/SPI5_CSN0, AE9 GPIO2_C0/UART0_RX, AF7 GPIO2_D1/SDIO0_CLKOUT/TEST_CLKOUT1, AF8 GPIO2_D4/SDIO0_BKPWR, AG7 GPIO2_C6/SDIO0_D2/SPI5_CLK, AG8 GPIO2_C2/UART0_CTSN, AH6 GPIO2_D0/SDIO0_CMD, AH8 GPIO2_C1/UART0_TX, AK5 GPIO2_C5/SDIO0_D1/SPI5_TXD, AL4 GPIO2_D2/SDIO0_DETN/PCIE_CLKREQN, AL5 GPIO2_C3/UART0_RTSN
part V pins: AC8 APIO4_VDDPST, AC9 APIO4_VDD, AD7 GPIO4_C7/HDMI_CECINOUT/EDP_HOTPLUG, AE6 GPIO4_D0/PCIE_CLKREQNB, AF5 GPIO4_C2/PWM0/VOP0_PWM/VOP1_PWM, AG4 GPIO4_D6, AG6 GPIO4_C0/I2C3_SDA/UART2B_RX, AH3 GPIO4_D2, AH5 GPIO4_D4, AJ3 GPIO4_D5, AJ4 GPIO4_C4/UART2C_TX, AK1 GPIO4_C5/SPDIF_TX, AK2 GPIO4_C3/UART2C_RX, AK3 GPIO4_D3, AK4 GPIO4_D1/DP_HOTPLUG, AL2 GPIO4_C1/I2C3_SCL/UART2B_TX, AL3 GPIO4_C6/PWM1
part W pins: AA6 GPIO3_D5/I2S0_SDI2SDO2, AA7 GPIO4_A4/I2S1_LRCK_RX, AA8 APIO5_VDDPST, AC6 GPIO4_A7/I2S1_SDO0, AC7 GPIO4_A0/I2S_CLK, AD6 GPIO4_A6/I2S1_SDI0, AE5 GPIO3_D4/I2S0_SDI1SDO3, AF3 GPIO4_A3/I2S1_SCLK, AF4 GPIO3_D1/I2S0_LRCK_RX, AG1 GPIO4_A1/I2C1_SDA, AG3 GPIO3_D0/I2S0_SCLK, AH1 GPIO3_D7/I2S0_SDO0, AH2 GPIO3_D6/I2S0_SDI3SDO1, AJ1 GPIO4_A5/I2S1_LRCK_TX, AJ2 GPIO3_D2/I2S0_LRCK_TX, Y6 GPIO4_A2/I2C1_SCL, Y7 GPIO3_D3/I2S0_SDI0, Y8 APIO5_VDD
part X pins: AA27 PCIE_TX2_P, AA28 PCIE_TX2_N, AC27 PCIE_RX2_P, AC28 PCIE_RX2_N, AD27 PCIE_TX3_P, AD28 PCIE_TX3_N, AD30 PCIE_RCLK_100M_N, AD31 PCIE_RCLK_100M_P, AE30 PCIE_TX0_P, AE31 PCIE_TX0_N, AF27 PCIE_RX3_P, AF28 PCIE_RX3_N, AF30 PCIE_RX0_P, AF31 PCIE_RX0_N, AG30 PCIE_TX1_P, AG31 PCIE_TX1_N, AH30 PCIE_RX1_P, AH31 PCIE_RX1_N, W24 PCIE_AVDD_0V9, Y24 PCIE_AVDD_1V8
part Y pins: AA19 NC, AA20 NC, AA22 NC, AB20 NC, AB22 NC, AC12 NC, AC14 NC, AD11 NC, AD12 NC, AD14 NC, AD15 NC
part D text: DDRC0
part E text: DDRC1
part F text: eMMC
part G text: SDMMC
part I text: USB 2.0
part J text: USB 3.0
part K text: USB 3.0
part L text: SAR-ADC
part M text: Camera IF
part N text: MIPI CSI
part O text: MIPI CSI/DSI
part P text: HDMI
part Q text: eDP
part R text: MIPI DSI
part S text: GMAC

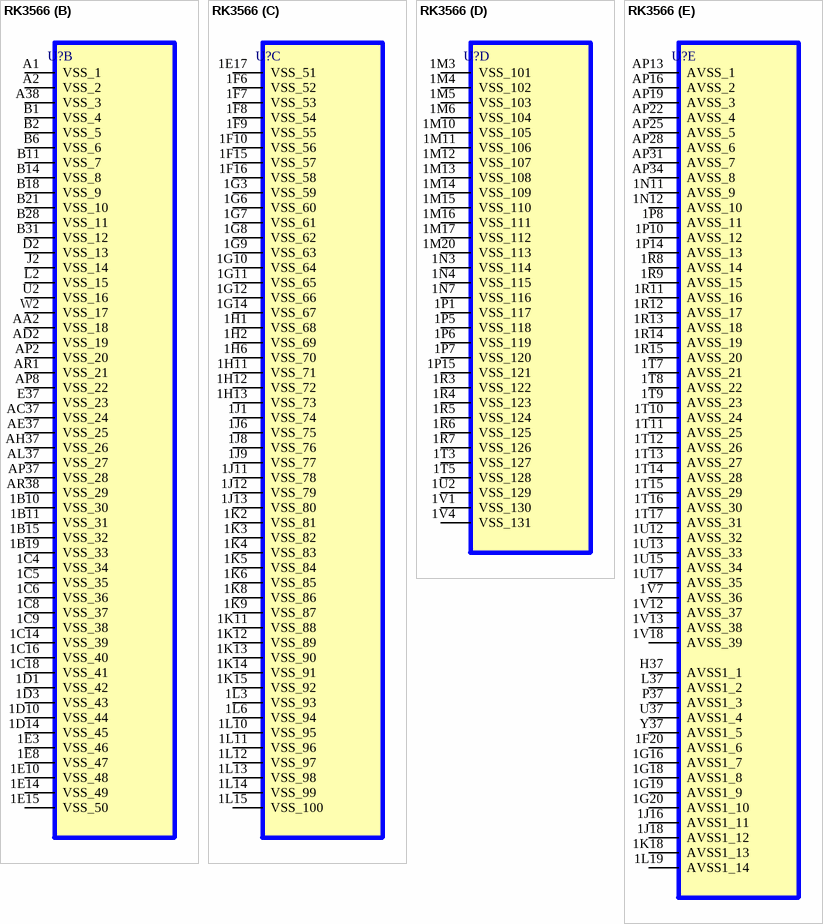
[diagram p4: symbol RK3566]

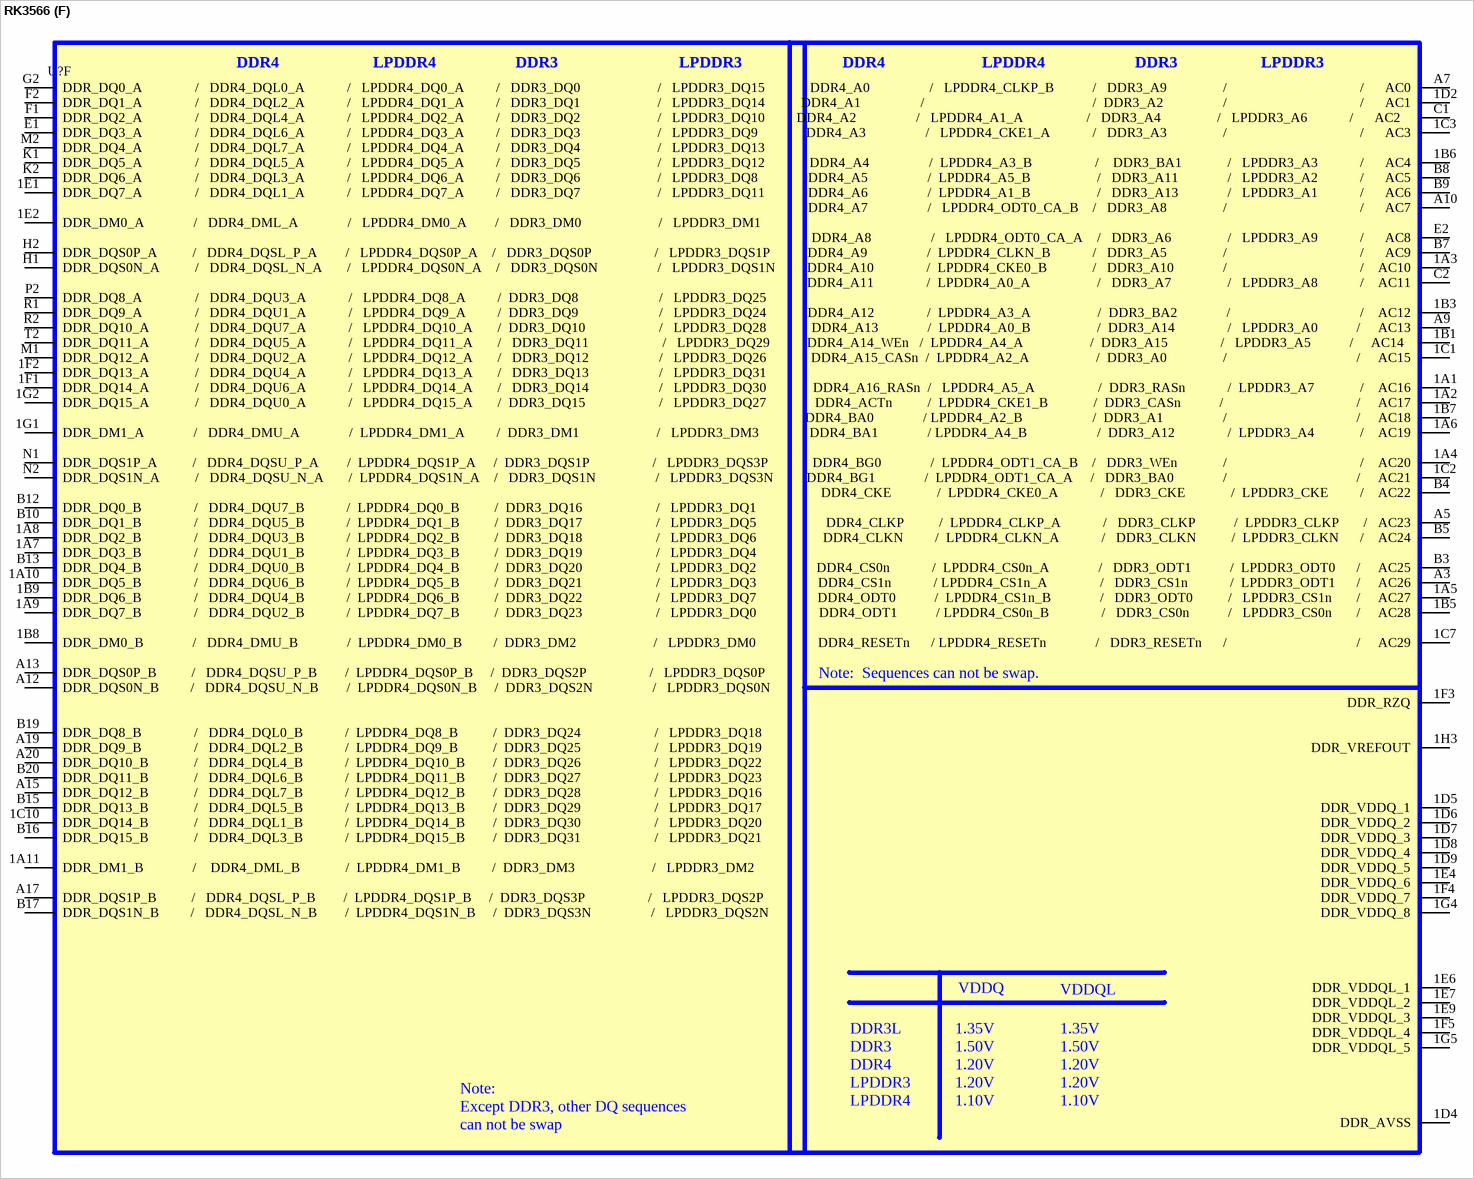
[diagram p5: symbol RK3566]

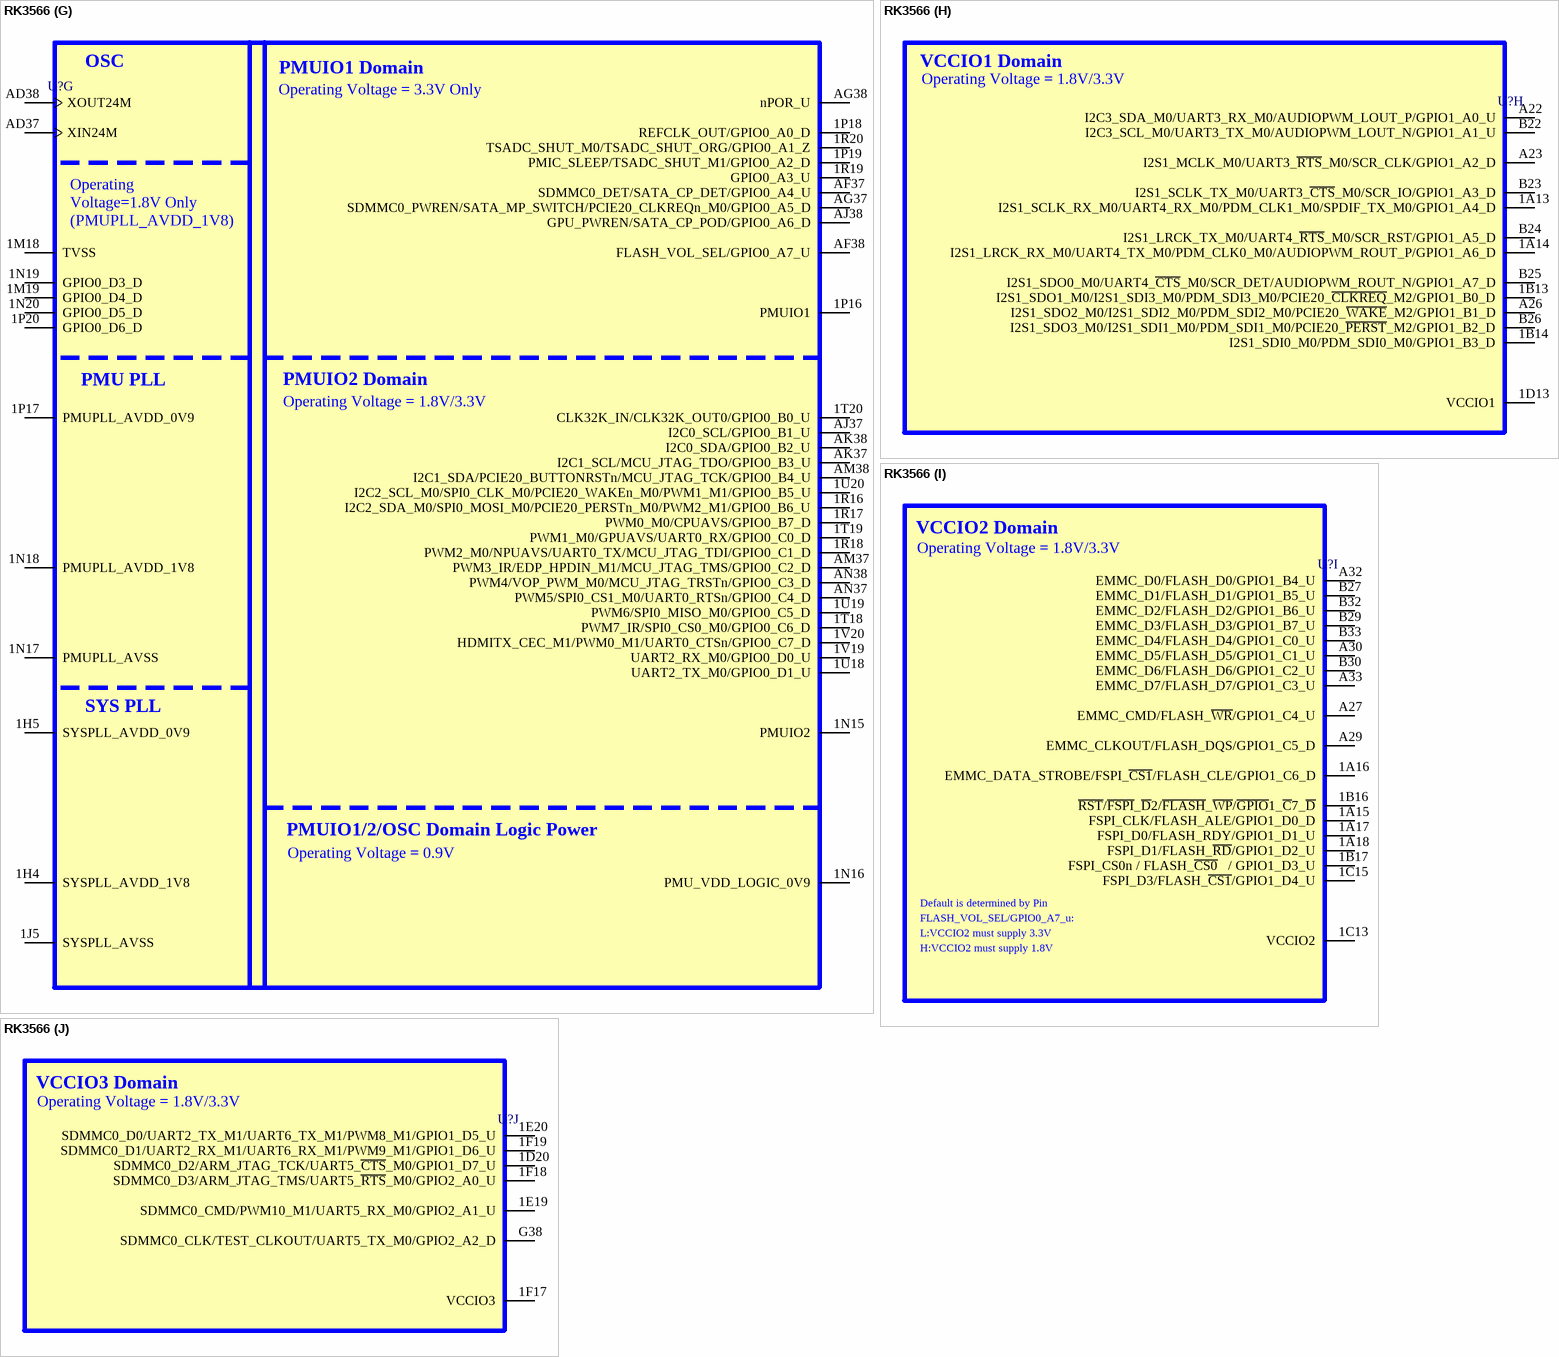
[diagram p6: symbol RK3566]

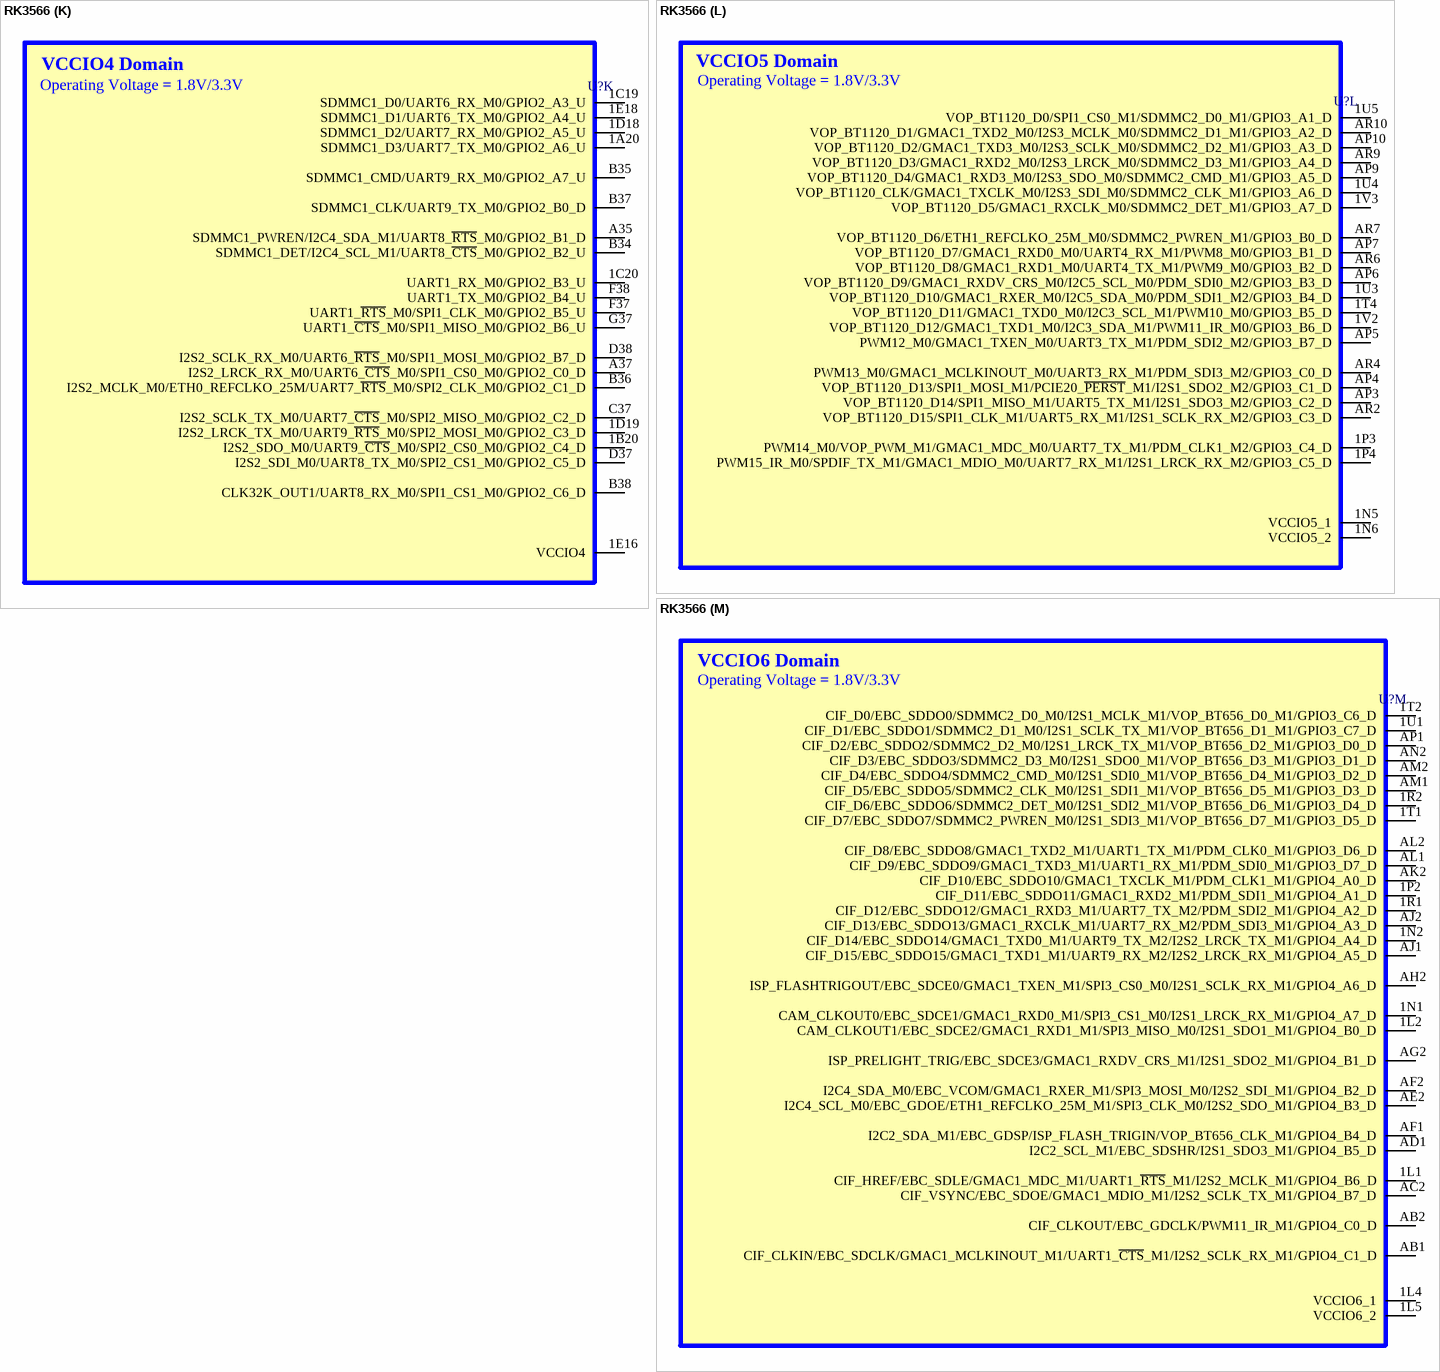
[diagram p7: symbol RK3566]

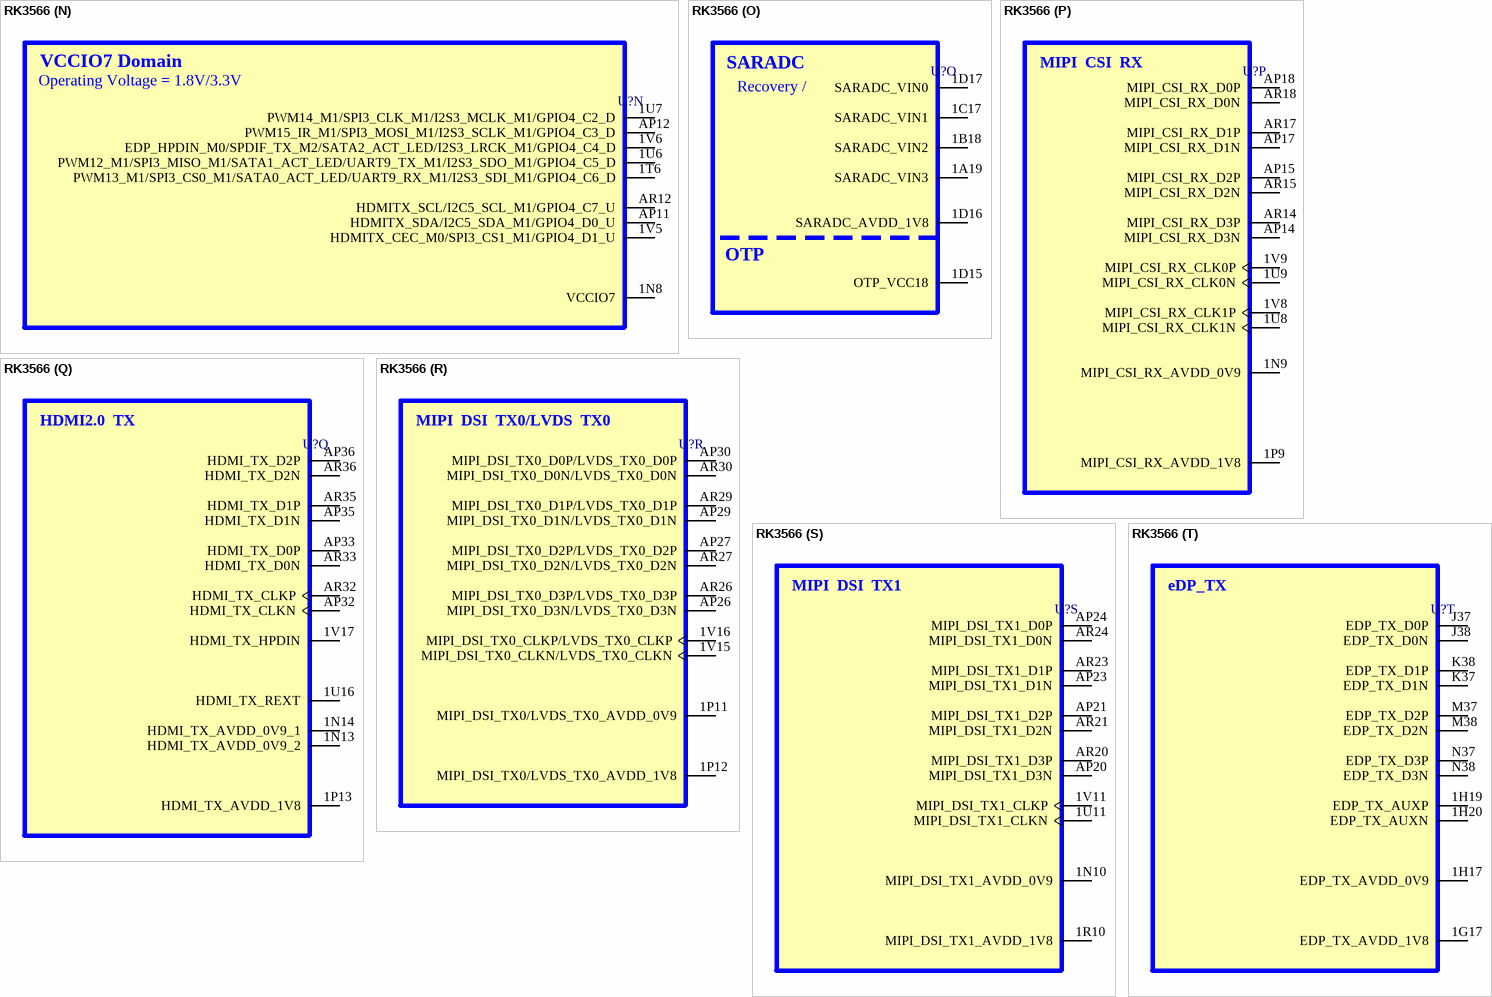
[diagram p8: symbol RK3566]

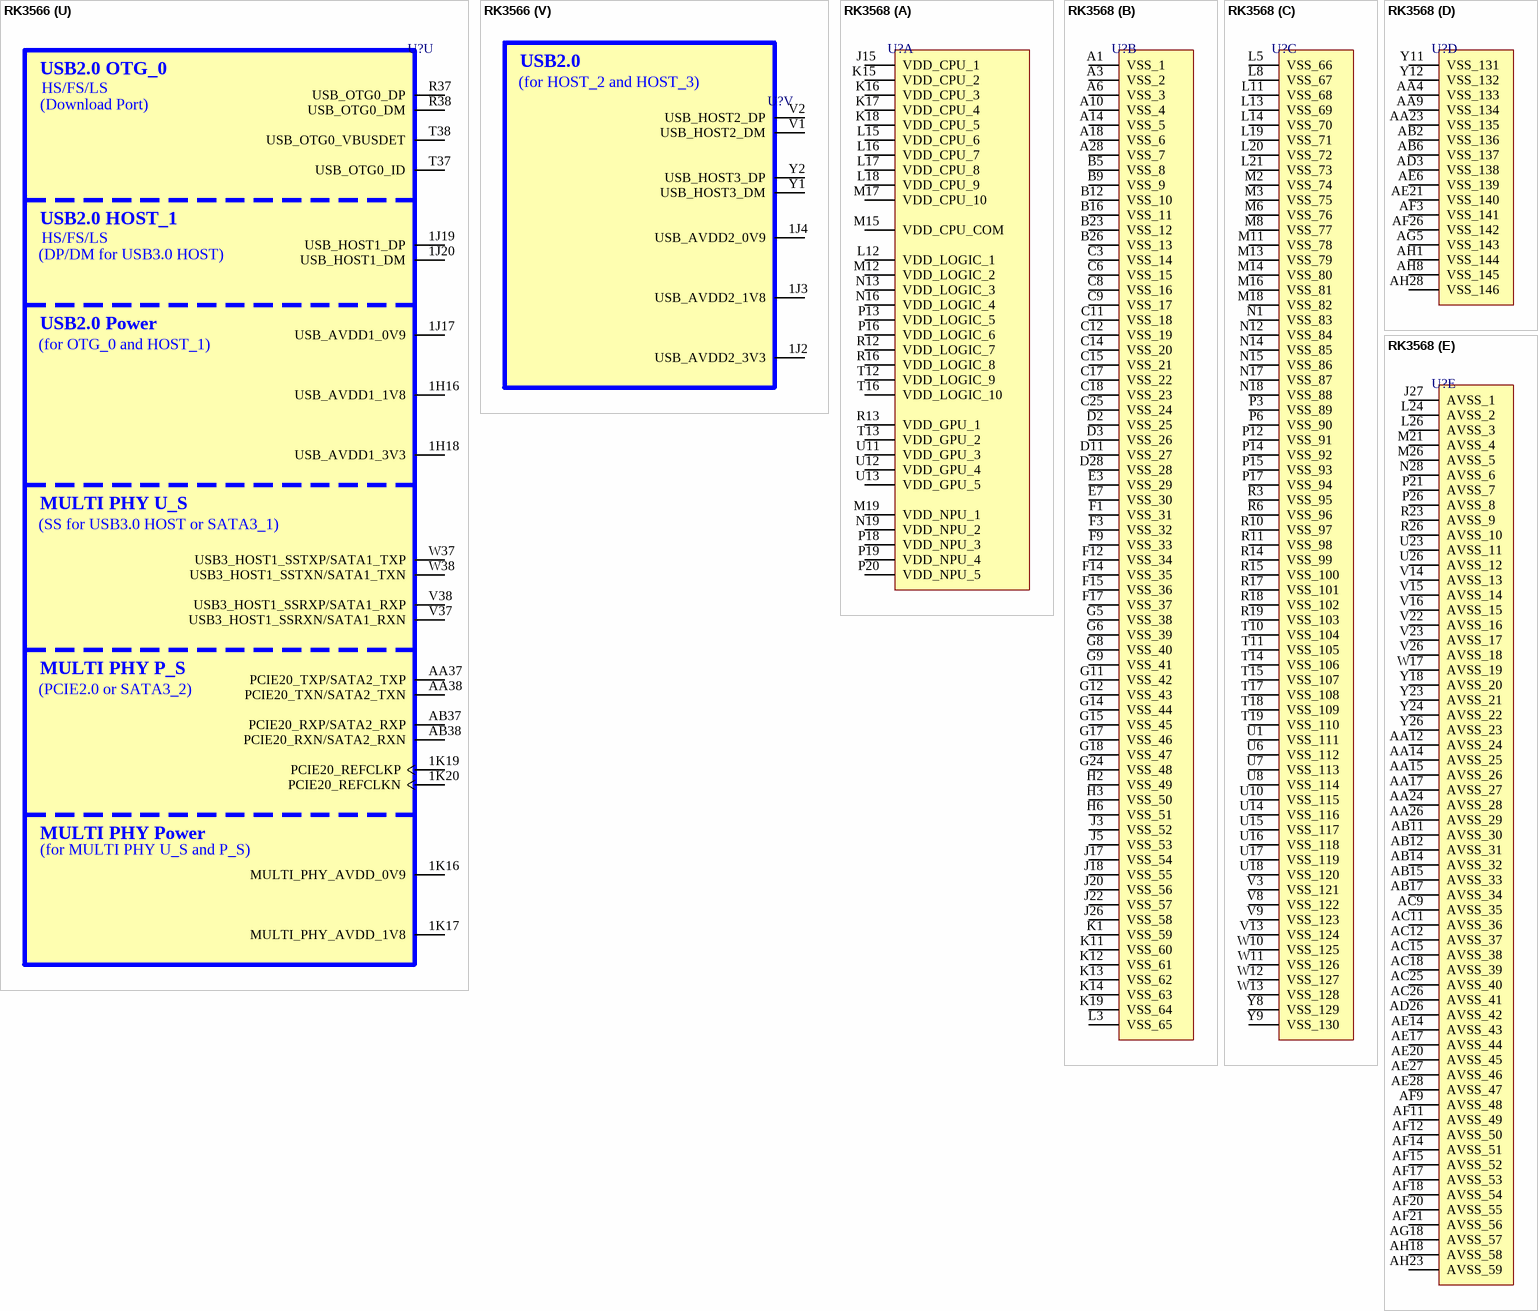
[diagram p9: symbols RK3566 to RK3568]

## RK3566
designator U?
BGA-565(15.5x14.4) Microcontrollers (MCU/MPU/SOC) ROHS; Manufacturer: Rockchip; Manufacturer Part Number: RK3566; Item Type: IC; Package: BGA-565(15.5x14.4); LCSC Part Number: C2943786; ComponentLink1Description: LCSC; ComponentLink1URL: https://www.lcsc.com/product-detail/Microcontrollers-MCU-MPU-SOC_Rockchip-RK3566_C2943786.html
footprint BGA-565(15.5x14.4)
part A pins: 1C12 VDD_CPU_1, 1D11 VDD_CPU_2, 1D12 VDD_CPU_3, 1E11 VDD_CPU_4, 1E12 VDD_CPU_5, 1E13 VDD_CPU_6, 1F11 VDD_CPU_7, 1F12 VDD_CPU_8, 1F13 VDD_CPU_9, 1F14 VDD_CPU_10, 1G13 VDD_CPU_11, 1G15 VDD_NPU_1, 1H7 VDD_LOGIC_1, 1H8 VDD_LOGIC_2, 1H9 VDD_LOGIC_3, 1H10 VDD_LOGIC_4, 1H14 VDD_NPU_2, 1H15 VDD_NPU_3, 1J7 VDD_LOGIC_5, 1J10 VDD_LOGIC_6, 1J14 VDD_NPU_4, 1J15 VDD_NPU_5, 1K7 VDD_LOGIC_7, 1K10 VDD_LOGIC_8, 1L7 VDD_LOGIC_9, 1L8 VDD_GPU_1, 1L9 VDD_GPU_2, 1M7 VDD_GPU_3, 1M8 VDD_GPU_4, 1M9 VDD_GPU_5
part B pins: 1B10 VSS_30, 1B11 VSS_31, 1B15 VSS_32, 1B19 VSS_33, 1C4 VSS_34, 1C5 VSS_35, 1C6 VSS_36, 1C8 VSS_37, 1C9 VSS_38, 1C14 VSS_39, 1C16 VSS_40, 1C18 VSS_41, 1D1 VSS_42, 1D3 VSS_43, 1D10 VSS_44, 1D14 VSS_45, 1E3 VSS_46, 1E8 VSS_47, 1E10 VSS_48, 1E14 VSS_49, 1E15 VSS_50, A1 VSS_1, A2 VSS_2, A38 VSS_3, AA2 VSS_18, AC37 VSS_24, AD2 VSS_19, AE37 VSS_25, AH37 VSS_26, AL37 VSS_27, AP2 VSS_20, AP8 VSS_22, AP37 VSS_28, AR1 VSS_21, AR38 VSS_29, B1 VSS_4, B2 VSS_5, B6 VSS_6, B11 VSS_7, B14 VSS_8, B18 VSS_9, B21 VSS_10, B28 VSS_11, B31 VSS_12, D2 VSS_13, E37 VSS_23, J2 VSS_14, L2 VSS_15, U2 VSS_16, W2 VSS_17
part C pins: 1E17 VSS_51, 1F6 VSS_52, 1F7 VSS_53, 1F8 VSS_54, 1F9 VSS_55, 1F10 VSS_56, 1F15 VSS_57, 1F16 VSS_58, 1G3 VSS_59, 1G6 VSS_60, 1G7 VSS_61, 1G8 VSS_62, 1G9 VSS_63, 1G10 VSS_64, 1G11 VSS_65, 1G12 VSS_66, 1G14 VSS_67, 1H1 VSS_68, 1H2 VSS_69, 1H6 VSS_70, 1H11 VSS_71, 1H12 VSS_72, 1H13 VSS_73, 1J1 VSS_74, 1J6 VSS_75, 1J8 VSS_76, 1J9 VSS_77, 1J11 VSS_78, 1J12 VSS_79, 1J13 VSS_80, 1K2 VSS_81, 1K3 VSS_82, 1K4 VSS_83, 1K5 VSS_84, 1K6 VSS_85, 1K8 VSS_86, 1K9 VSS_87, 1K11 VSS_88, 1K12 VSS_89, 1K13 VSS_90, 1K14 VSS_91, 1K15 VSS_92, 1L3 VSS_93, 1L6 VSS_94, 1L10 VSS_95, 1L11 VSS_96, 1L12 VSS_97, 1L13 VSS_98, 1L14 VSS_99, 1L15 VSS_100
part D pins: 1M3 VSS_101, 1M4 VSS_102, 1M5 VSS_103, 1M6 VSS_104, 1M10 VSS_105, 1M11 VSS_106, 1M12 VSS_107, 1M13 VSS_108, 1M14 VSS_109, 1M15 VSS_110, 1M16 VSS_111, 1M17 VSS_112, 1M20 VSS_113, 1N3 VSS_114, 1N4 VSS_115, 1N7 VSS_116, 1P1 VSS_117, 1P5 VSS_118, 1P6 VSS_119, 1P7 VSS_120, 1P15 VSS_121, 1R3 VSS_122, 1R4 VSS_123, 1R5 VSS_124, 1R6 VSS_125, 1R7 VSS_126, 1T3 VSS_127, 1T5 VSS_128, 1U2 VSS_129, 1V1 VSS_130, 1V4 VSS_131
part E pins: 1F20 AVSS1_6, 1G16 AVSS1_7, 1G18 AVSS1_8, 1G19 AVSS1_9, 1G20 AVSS1_10, 1J16 AVSS1_11, 1J18 AVSS1_12, 1K18 AVSS1_13, 1L19 AVSS1_14, 1N11 AVSS_9, 1N12 AVSS_10, 1P8 AVSS_11, 1P10 AVSS_12, 1P14 AVSS_13, 1R8 AVSS_14, 1R9 AVSS_15, 1R11 AVSS_16, 1R12 AVSS_17, 1R13 AVSS_18, 1R14 AVSS_19, 1R15 AVSS_20, 1T7 AVSS_21, 1T8 AVSS_22, 1T9 AVSS_23, 1T10 AVSS_24, 1T11 AVSS_25, 1T12 AVSS_26, 1T13 AVSS_27, 1T14 AVSS_28, 1T15 AVSS_29, 1T16 AVSS_30, 1T17 AVSS_31, 1U12 AVSS_32, 1U13 AVSS_33, 1U15 AVSS_34, 1U17 AVSS_35, 1V7 AVSS_36, 1V12 AVSS_37, 1V13 AVSS_38, 1V18 AVSS_39, AP13 AVSS_1, AP16 AVSS_2, AP19 AVSS_3, AP22 AVSS_4, AP25 AVSS_5, AP28 AVSS_6, AP31 AVSS_7, AP34 AVSS_8, H37 AVSS1_1, L37 AVSS1_2, P37 AVSS1_3, U37 AVSS1_4, Y37 AVSS1_5
part F pins: 1A1 DDR4_A16_RASn  /   LPDDR4_A5_A                  /  DDR3_RASn            /  LPDDR3_A7             /    AC16, 1A2 DDR4_ACTn          /  LPDDR4_CKE1_B             /  DDR3_CASn           /                                      /     AC17, 1A3 DDR4_A10               /  LPDDR4_CKE0_B             /   DDR3_A10              /                                      /    AC10, 1A4 DDR4_BG0              /  LPDDR4_ODT1_CA_B    /   DDR3_WEn             /                                      /    AC20, 1A5 DDR4_ODT0           /  LPDDR4_CS1n_B              /   DDR3_ODT0          /   LPDDR3_CS1n       /     AC27, 1A6 DDR4_BA1              / LPDDR4_A4_B                    /  DDR3_A12               /  LPDDR3_A4             /    AC19, 1A7 DDR_DQ3_B               /   DDR4_DQU1_B            /  LPDDR4_DQ3_B          /  DDR3_DQ19                     /   LPDDR3_DQ4 , 1A8 DDR_DQ2_B               /   DDR4_DQU3_B            /  LPDDR4_DQ2_B          /  DDR3_DQ18                     /   LPDDR3_DQ6, 1A9 DDR_DQ7_B               /   DDR4_DQU2_B            /  LPDDR4_DQ7_B          /  DDR3_DQ23                     /   LPDDR3_DQ0 , 1A10 DDR_DQ5_B               /   DDR4_DQU6_B            /  LPDDR4_DQ5_B          /  DDR3_DQ21                     /   LPDDR3_DQ3, 1A11 DDR_DM1_B              /    DDR4_DML_B             /  LPDDR4_DM1_B         /  DDR3_DM3                      /   LPDDR3_DM2, 1B1 DDR4_A14_WEn   /  LPDDR4_A4_A                   /  DDR3_A15               /   LPDDR3_A5           /     AC14  , 1B3 DDR4_A12               /  LPDDR4_A3_A                   /  DDR3_BA2              /                                     /    AC12, 1B5 DDR4_ODT1           / LPDDR4_CS0n_B               /   DDR3_CS0n           /   LPDDR3_CS0n       /     AC28, 1B6 DDR4_A4                 /  LPDDR4_A3_B                  /    DDR3_BA1             /   LPDDR3_A3            /      AC4, 1B7 DDR4_BA0              / LPDDR4_A2_B                    /  DDR3_A1                 /                                     /     AC18, 1B8 DDR_DM0_B              /   DDR4_DMU_B              /  LPDDR4_DM0_B         /  DDR3_DM2                      /   LPDDR3_DM0, 1B9 DDR_DQ6_B               /   DDR4_DQU4_B            /  LPDDR4_DQ6_B          /  DDR3_DQ22                     /   LPDDR3_DQ7, 1C1 DDR4_A15_CASn  /  LPDDR4_A2_A                   /  DDR3_A0                /                                     /     AC15, 1C2 DDR4_BG1              /  LPDDR4_ODT1_CA_A     /   DDR3_BA0              /                                     /     AC21, 1C3 DDR4_A3                 /   LPDDR4_CKE1_A            /   DDR3_A3                /                                      /      AC3, 1C7 DDR4_RESETn      / LPDDR4_RESETn              /   DDR3_RESETn      /                                     /     AC29, 1C10 DDR_DQ14_B             /   DDR4_DQL1_B            /  LPDDR4_DQ14_B        /  DDR3_DQ30                     /   LPDDR3_DQ20 , 1D2 DDR4_A1                 /                                                /  DDR3_A2                 /                                      /      AC1, 1D4 DDR_AVSS, 1D5 DDR_VDDQ_1, 1D6 DDR_VDDQ_2, 1D7 DDR_VDDQ_3, 1D8 DDR_VDDQ_4, 1D9 DDR_VDDQ_5, 1E1 DDR_DQ7_A               /   DDR4_DQL1_A            /   LPDDR4_DQ7_A         /   DDR3_DQ7                      /   LPDDR3_DQ11  , 1E2 DDR_DM0_A              /   DDR4_DML_A              /   LPDDR4_DM0_A        /   DDR3_DM0                      /   LPDDR3_DM1, 1E4 DDR_VDDQ_6, 1E6 DDR_VDDQL_1, 1E7 DDR_VDDQL_2, 1E9 DDR_VDDQL_3, 1F1 DDR_DQ14_A             /   DDR4_DQU6_A            /   LPDDR4_DQ14_A       /   DDR3_DQ14                    /   LPDDR3_DQ30, 1F2 DDR_DQ13_A             /   DDR4_DQU4_A            /   LPDDR4_DQ13_A       /   DDR3_DQ13                    /   LPDDR3_DQ31, 1F3 DDR_RZQ, 1F4 DDR_VDDQ_7, 1F5 DDR_VDDQL_4, 1G1 DDR_DM1_A              /   DDR4_DMU_A              /  LPDDR4_DM1_A         /  DDR3_DM1                      /   LPDDR3_DM3 , 1G2 DDR_DQ15_A             /   DDR4_DQU0_A            /   LPDDR4_DQ15_A       /  DDR3_DQ15                     /   LPDDR3_DQ27, 1G4 DDR_VDDQ_8, 1G5 DDR_VDDQL_5, 1H3 DDR_VREFOUT, A3 DDR4_CS1n            / LPDDR4_CS1n_A               /   DDR3_CS1n            /  LPDDR3_ODT1      /     AC26, A5 DDR4_CLKP          /  LPDDR4_CLKP_A            /   DDR3_CLKP           /  LPDDR3_CLKP       /   AC23, A7 DDR4_A0                 /   LPDDR4_CLKP_B           /   DDR3_A9                /                                      /      AC0, A9 DDR4_A13              /  LPDDR4_A0_B                   /  DDR3_A14               /   LPDDR3_A0           /     AC13, A10 DDR4_A7                 /   LPDDR4_ODT0_CA_B    /   DDR3_A8                /                                      /      AC7, A12 DDR_DQS0N_B         /   DDR4_DQSU_N_B        /  LPDDR4_DQS0N_B     /  DDR3_DQS2N                 /   LPDDR3_DQS0N , A13 DDR_DQS0P_B          /   DDR4_DQSU_P_B        /  LPDDR4_DQS0P_B     /  DDR3_DQS2P                  /   LPDDR3_DQS0P, A15 DDR_DQ12_B             /   DDR4_DQL7_B            /  LPDDR4_DQ12_B        /  DDR3_DQ28                     /   LPDDR3_DQ16 , A17 DDR_DQS1P_B          /   DDR4_DQSL_P_B        /  LPDDR4_DQS1P_B     /  DDR3_DQS3P                  /   LPDDR3_DQS2P, A19 DDR_DQ9_B               /   DDR4_DQL2_B            /  LPDDR4_DQ9_B          /  DDR3_DQ25                     /   LPDDR3_DQ19 , A20 DDR_DQ10_B             /   DDR4_DQL4_B            /  LPDDR4_DQ10_B        /  DDR3_DQ26                     /   LPDDR3_DQ22 , B3 DDR4_CS0n            /  LPDDR4_CS0n_A              /   DDR3_ODT1           /  LPDDR3_ODT0      /     AC25, B4 DDR4_CKE             /  LPDDR4_CKE0_A            /   DDR3_CKE             /  LPDDR3_CKE         /    AC22, B5 DDR4_CLKN         /  LPDDR4_CLKN_A            /   DDR3_CLKN          /  LPDDR3_CLKN      /    AC24, B7 DDR4_A9                 /  LPDDR4_CLKN_B            /   DDR3_A5                /                                      /      AC9, B8 DDR4_A5                 /  LPDDR4_A5_B                   /   DDR3_A11              /   LPDDR3_A2            /      AC5, B9 DDR4_A6                 /  LPDDR4_A1_B                   /   DDR3_A13              /   LPDDR3_A1            /      AC6, B10 DDR_DQ1_B               /   DDR4_DQU5_B            /  LPDDR4_DQ1_B          /  DDR3_DQ17                     /   LPDDR3_DQ5, B12 DDR_DQ0_B               /   DDR4_DQU7_B            /  LPDDR4_DQ0_B          /  DDR3_DQ16                     /   LPDDR3_DQ1 , B13 DDR_DQ4_B               /   DDR4_DQU0_B            /  LPDDR4_DQ4_B          /  DDR3_DQ20                     /   LPDDR3_DQ2  , B15 DDR_DQ13_B             /   DDR4_DQL5_B            /  LPDDR4_DQ13_B        /  DDR3_DQ29                     /   LPDDR3_DQ17, B16 DDR_DQ15_B             /   DDR4_DQL3_B            /  LPDDR4_DQ15_B        /  DDR3_DQ31                     /   LPDDR3_DQ21, B17 DDR_DQS1N_B         /   DDR4_DQSL_N_B        /  LPDDR4_DQS1N_B     /  DDR3_DQS3N                 /   LPDDR3_DQS2N , B19 DDR_DQ8_B               /   DDR4_DQL0_B            /  LPDDR4_DQ8_B          /  DDR3_DQ24                     /   LPDDR3_DQ18, B20 DDR_DQ11_B             /   DDR4_DQL6_B            /  LPDDR4_DQ11_B        /  DDR3_DQ27                     /   LPDDR3_DQ23, C1 DDR4_A2                 /   LPDDR4_A1_A                  /   DDR3_A4                /   LPDDR3_A6            /      AC2   , C2 DDR4_A11               /  LPDDR4_A0_A                   /   DDR3_A7                /   LPDDR3_A8            /    AC11, E1 DDR_DQ3_A               /   DDR4_DQL6_A            /   LPDDR4_DQ3_A         /   DDR3_DQ3                      /   LPDDR3_DQ9 , E2 DDR4_A8                 /   LPDDR4_ODT0_CA_A    /   DDR3_A6                /   LPDDR3_A9            /      AC8, F1 DDR_DQ2_A               /   DDR4_DQL4_A            /   LPDDR4_DQ2_A         /   DDR3_DQ2                      /   LPDDR3_DQ10 , F2 DDR_DQ1_A               /   DDR4_DQL2_A            /   LPDDR4_DQ1_A         /   DDR3_DQ1                      /   LPDDR3_DQ14 , G2 DDR_DQ0_A               /   DDR4_DQL0_A            /   LPDDR4_DQ0_A         /   DDR3_DQ0                      /   LPDDR3_DQ15, H1 DDR_DQS0N_A          /   DDR4_DQSL_N_A       /   LPDDR4_DQS0N_A    /   DDR3_DQS0N                 /   LPDDR3_DQS1N, H2 DDR_DQS0P_A          /   DDR4_DQSL_P_A        /   LPDDR4_DQS0P_A    /   DDR3_DQS0P                  /   LPDDR3_DQS1P, K1 DDR_DQ5_A               /   DDR4_DQL5_A            /   LPDDR4_DQ5_A         /   DDR3_DQ5                      /   LPDDR3_DQ12 , K2 DDR_DQ6_A               /   DDR4_DQL3_A            /   LPDDR4_DQ6_A         /   DDR3_DQ6                      /   LPDDR3_DQ8  , M1 DDR_DQ12_A             /   DDR4_DQU2_A            /   LPDDR4_DQ12_A       /   DDR3_DQ12                    /   LPDDR3_DQ26, M2 DDR_DQ4_A               /   DDR4_DQL7_A            /   LPDDR4_DQ4_A         /   DDR3_DQ4                      /   LPDDR3_DQ13, N1 DDR_DQS1P_A          /   DDR4_DQSU_P_A        /  LPDDR4_DQS1P_A     /  DDR3_DQS1P                  /   LPDDR3_DQS3P, N2 DDR_DQS1N_A          /   DDR4_DQSU_N_A       /  LPDDR4_DQS1N_A    /   DDR3_DQS1N                 /   LPDDR3_DQS3N , P2 DDR_DQ8_A               /   DDR4_DQU3_A            /   LPDDR4_DQ8_A         /  DDR3_DQ8                       /   LPDDR3_DQ25, R1 DDR_DQ9_A               /   DDR4_DQU1_A            /   LPDDR4_DQ9_A         /  DDR3_DQ9                       /   LPDDR3_DQ24, R2 DDR_DQ10_A             /   DDR4_DQU7_A            /   LPDDR4_DQ10_A       /  DDR3_DQ10                     /   LPDDR3_DQ28, T2 DDR_DQ11_A             /   DDR4_DQU5_A            /   LPDDR4_DQ11_A       /   DDR3_DQ11                     /   LPDDR3_DQ29
part G pins: 1H4 SYSPLL_AVDD_1V8, 1H5 SYSPLL_AVDD_0V9, 1J5 SYSPLL_AVSS, 1M18 TVSS, 1M19 GPIO0_D4_D, 1N15 PMUIO2, 1N16 PMU_VDD_LOGIC_0V9, 1N17 PMUPLL_AVSS, 1N18 PMUPLL_AVDD_1V8, 1N19 GPIO0_D3_D, 1N20 GPIO0_D5_D, 1P16 PMUIO1, 1P17 PMUPLL_AVDD_0V9, 1P18 REFCLK_OUT/GPIO0_A0_D, 1P19 PMIC_SLEEP/TSADC_SHUT_M1/GPIO0_A2_D, 1P20 GPIO0_D6_D, 1R16 I2C2_SDA_M0/SPI0_MOSI_M0/PCIE20_PERSTn_M0/PWM2_M1/GPIO0_B6_U, 1R17 PWM0_M0/CPUAVS/GPIO0_B7_D, 1R18 PWM2_M0/NPUAVS/UART0_TX/MCU_JTAG_TDI/GPIO0_C1_D, 1R19 GPIO0_A3_U, 1R20 TSADC_SHUT_M0/TSADC_SHUT_ORG/GPIO0_A1_Z, 1T18 PWM7_IR/SPI0_CS0_M0/GPIO0_C6_D, 1T19 PWM1_M0/GPUAVS/UART0_RX/GPIO0_C0_D, 1T20 CLK32K_IN/CLK32K_OUT0/GPIO0_B0_U, 1U18 UART2_TX_M0/GPIO0_D1_U, 1U19 PWM6/SPI0_MISO_M0/GPIO0_C5_D, 1U20 I2C2_SCL_M0/SPI0_CLK_M0/PCIE20_WAKEn_M0/PWM1_M1/GPIO0_B5_U, 1V19 UART2_RX_M0/GPIO0_D0_U, 1V20 HDMITX_CEC_M1/PWM0_M1/UART0_CTSn/GPIO0_C7_D, AD37 XIN24M, AD38 XOUT24M, AF37 SDMMC0_DET/SATA_CP_DET/GPIO0_A4_U, AF38 FLASH_VOL_SEL/GPIO0_A7_U, AG37 SDMMC0_PWREN/SATA_MP_SWITCH/PCIE20_CLKREQn_M0/GPIO0_A5_D, AG38 nPOR_U, AJ37 I2C0_SCL/GPIO0_B1_U, AJ38 GPU_PWREN/SATA_CP_POD/GPIO0_A6_D, AK37 I2C1_SCL/MCU_JTAG_TDO/GPIO0_B3_U, AK38 I2C0_SDA/GPIO0_B2_U, AM37 PWM3_IR/EDP_HPDIN_M1/MCU_JTAG_TMS/GPIO0_C2_D, AM38 I2C1_SDA/PCIE20_BUTTONRSTn/MCU_JTAG_TCK/GPIO0_B4_U, AN37 PWM5/SPI0_CS1_M0/UART0_RTSn/GPIO0_C4_D, AN38 PWM4/VOP_PWM_M0/MCU_JTAG_TRSTn/GPIO0_C3_D
part H pins: 1A13 I2S1_SCLK_RX_M0/UART4_RX_M0/PDM_CLK1_M0/SPDIF_TX_M0/GPIO1_A4_D, 1A14 I2S1_LRCK_RX_M0/UART4_TX_M0/PDM_CLK0_M0/AUDIOPWM_ROUT_P/GPIO1_A6_D, 1B13 I2S1_SDO1_M0/I2S1_SDI3_M0/PDM_SDI3_M0/PCIE20_~{CLKREQ}_M2/GPIO1_B0_D, 1B14 I2S1_SDI0_M0/PDM_SDI0_M0/GPIO1_B3_D, 1D13 VCCIO1, A22 I2C3_SDA_M0/UART3_RX_M0/AUDIOPWM_LOUT_P/GPIO1_A0_U, A23 I2S1_MCLK_M0/UART3_~{RTS}_M0/SCR_CLK/GPIO1_A2_D, A26 I2S1_SDO2_M0/I2S1_SDI2_M0/PDM_SDI2_M0/PCIE20_~{WAKE}_M2/GPIO1_B1_D, B22 I2C3_SCL_M0/UART3_TX_M0/AUDIOPWM_LOUT_N/GPIO1_A1_U, B23 I2S1_SCLK_TX_M0/UART3_~{CTS}_M0/SCR_IO/GPIO1_A3_D, B24 I2S1_LRCK_TX_M0/UART4_~{RTS}_M0/SCR_RST/GPIO1_A5_D, B25 I2S1_SDO0_M0/UART4_~{CTS}_M0/SCR_DET/AUDIOPWM_ROUT_N/GPIO1_A7_D, B26 I2S1_SDO3_M0/I2S1_SDI1_M0/PDM_SDI1_M0/PCIE20_~{PERST}_M2/GPIO1_B2_D
part I pins: 1A15 FSPI_CLK/FLASH_ALE/GPIO1_D0_D, 1A16 EMMC_DATA_STROBE/FSPI_~{CS1}/FLASH_CLE/GPIO1_C6_D, 1A17 FSPI_D0/FLASH_RDY/GPIO1_D1_U, 1A18 FSPI_D1/FLASH_~{RD}/GPIO1_D2_U, 1B16 ~{RST}/~{FSPI}_~{D}2/~{FLASH}_~{WP}/~{GPIO}1_~{C}7_~{D}, 1B17 FSPI_CS0n / FLASH_~{CS0}   / GPIO1_D3_U, 1C13 VCCIO2, 1C15 FSPI_D3/FLASH_~{CS1}/GPIO1_D4_U, A27 EMMC_CMD/FLASH_~{WR}/GPIO1_C4_U, A29 EMMC_CLKOUT/FLASH_DQS/GPIO1_C5_D, A30 EMMC_D5/FLASH_D5/GPIO1_C1_U, A32 EMMC_D0/FLASH_D0/GPIO1_B4_U, A33 EMMC_D7/FLASH_D7/GPIO1_C3_U, B27 EMMC_D1/FLASH_D1/GPIO1_B5_U, B29 EMMC_D3/FLASH_D3/GPIO1_B7_U, B30 EMMC_D6/FLASH_D6/GPIO1_C2_U, B32 EMMC_D2/FLASH_D2/GPIO1_B6_U, B33 EMMC_D4/FLASH_D4/GPIO1_C0_U
part J pins: 1D20 SDMMC0_D2/ARM_JTAG_TCK/UART5_~{CTS}_M0/GPIO1_D7_U, 1E19 SDMMC0_CMD/PWM10_M1/UART5_RX_M0/GPIO2_A1_U, 1E20 SDMMC0_D0/UART2_TX_M1/UART6_TX_M1/PWM8_M1/GPIO1_D5_U, 1F17 VCCIO3, 1F18 SDMMC0_D3/ARM_JTAG_TMS/UART5_~{RTS}_M0/GPIO2_A0_U, 1F19 SDMMC0_D1/UART2_RX_M1/UART6_RX_M1/PWM9_M1/GPIO1_D6_U, G38 SDMMC0_CLK/TEST_CLKOUT/UART5_TX_M0/GPIO2_A2_D
part K pins: 1A20 SDMMC1_D3/UART7_TX_M0/GPIO2_A6_U, 1B20 I2S2_SDO_M0/UART9_~{CTS}_M0/SPI2_CS0_M0/GPIO2_C4_D, 1C19 SDMMC1_D0/UART6_RX_M0/GPIO2_A3_U, 1C20 UART1_RX_M0/GPIO2_B3_U, 1D18 SDMMC1_D2/UART7_RX_M0/GPIO2_A5_U, 1D19 I2S2_LRCK_TX_M0/UART9_~{RTS}_M0/SPI2_MOSI_M0/GPIO2_C3_D, 1E16 VCCIO4, 1E18 SDMMC1_D1/UART6_TX_M0/GPIO2_A4_U, A35 SDMMC1_PWREN/I2C4_SDA_M1/UART8_~{RTS}_M0/GPIO2_B1_D, A37 I2S2_LRCK_RX_M0/UART6_~{CTS}_M0/SPI1_CS0_M0/GPIO2_C0_D, B34 SDMMC1_DET/I2C4_SCL_M1/UART8_~{CTS}_M0/GPIO2_B2_U, B35 SDMMC1_CMD/UART9_RX_M0/GPIO2_A7_U, B36 I2S2_MCLK_M0/ETH0_REFCLKO_25M/UART7_~{RTS}_M0/SPI2_CLK_M0/GPIO2_C1_D, B37 SDMMC1_CLK/UART9_TX_M0/GPIO2_B0_D, B38 CLK32K_OUT1/UART8_RX_M0/SPI1_CS1_M0/GPIO2_C6_D, C37 I2S2_SCLK_TX_M0/UART7_~{CTS}_M0/SPI2_MISO_M0/GPIO2_C2_D, D37 I2S2_SDI_M0/UART8_TX_M0/SPI2_CS1_M0/GPIO2_C5_D, D38 I2S2_SCLK_RX_M0/UART6_~{RTS}_M0/SPI1_MOSI_M0/GPIO2_B7_D, F37 UART1_~{RTS}_M0/SPI1_CLK_M0/GPIO2_B5_U, F38 UART1_TX_M0/GPIO2_B4_U, G37 UART1_~{CTS}_M0/SPI1_MISO_M0/GPIO2_B6_U
part L pins: 1N5 VCCIO5_1, 1N6 VCCIO5_2, 1P3 PWM14_M0/VOP_PWM_M1/GMAC1_MDC_M0/UART7_TX_M1/PDM_CLK1_M2/GPIO3_C4_D, 1P4 PWM15_IR_M0/SPDIF_TX_M1/GMAC1_MDIO_M0/UART7_RX_M1/I2S1_LRCK_RX_M2/GPIO3_C5_D, 1T4 VOP_BT1120_D11/GMAC1_TXD0_M0/I2C3_SCL_M1/PWM10_M0/GPIO3_B5_D, 1U3 VOP_BT1120_D10/GMAC1_RXER_M0/I2C5_SDA_M0/PDM_SDI1_M2/GPIO3_B4_D, 1U4 VOP_BT1120_CLK/GMAC1_TXCLK_M0/I2S3_SDI_M0/SDMMC2_CLK_M1/GPIO3_A6_D, 1U5 VOP_BT1120_D0/SPI1_CS0_M1/SDMMC2_D0_M1/GPIO3_A1_D, 1V2 VOP_BT1120_D12/GMAC1_TXD1_M0/I2C3_SDA_M1/PWM11_IR_M0/GPIO3_B6_D, 1V3 VOP_BT1120_D5/GMAC1_RXCLK_M0/SDMMC2_DET_M1/GPIO3_A7_D, AP3 VOP_BT1120_D14/SPI1_MISO_M1/UART5_TX_M1/I2S1_SDO3_M2/GPIO3_C2_D, AP4 VOP_BT1120_D13/SPI1_MOSI_M1/PCIE20_~{PERST}_M1/I2S1_SDO2_M2/GPIO3_C1_D, AP5 PWM12_M0/GMAC1_TXEN_M0/UART3_TX_M1/PDM_SDI2_M2/GPIO3_B7_D, AP6 VOP_BT1120_D9/GMAC1_RXDV_CRS_M0/I2C5_SCL_M0/PDM_SDI0_M2/GPIO3_B3_D, AP7 VOP_BT1120_D7/GMAC1_RXD0_M0/UART4_RX_M1/PWM8_M0/GPIO3_B1_D, AP9 VOP_BT1120_D4/GMAC1_RXD3_M0/I2S3_SDO_M0/SDMMC2_CMD_M1/GPIO3_A5_D, AP10 VOP_BT1120_D2/GMAC1_TXD3_M0/I2S3_SCLK_M0/SDMMC2_D2_M1/GPIO3_A3_D, AR2 VOP_BT1120_D15/SPI1_CLK_M1/UART5_RX_M1/I2S1_SCLK_RX_M2/GPIO3_C3_D, AR4 PWM13_M0/GMAC1_MCLKINOUT_M0/UART3_RX_M1/PDM_SDI3_M2/GPIO3_C0_D, AR6 VOP_BT1120_D8/GMAC1_RXD1_M0/UART4_TX_M1/PWM9_M0/GPIO3_B2_D, AR7 VOP_BT1120_D6/ETH1_REFCLKO_25M_M0/SDMMC2_PWREN_M1/GPIO3_B0_D, AR9 VOP_BT1120_D3/GMAC1_RXD2_M0/I2S3_LRCK_M0/SDMMC2_D3_M1/GPIO3_A4_D, AR10 VOP_BT1120_D1/GMAC1_TXD2_M0/I2S3_MCLK_M0/SDMMC2_D1_M1/GPIO3_A2_D
part M pins: 1L1 CIF_HREF/EBC_SDLE/GMAC1_MDC_M1/UART1_~{RTS}_M1/I2S2_MCLK_M1/GPIO4_B6_D, 1L2 CAM_CLKOUT1/EBC_SDCE2/GMAC1_RXD1_M1/SPI3_MISO_M0/I2S1_SDO1_M1/GPIO4_B0_D, 1L4 VCCIO6_1, 1L5 VCCIO6_2, 1N1 CAM_CLKOUT0/EBC_SDCE1/GMAC1_RXD0_M1/SPI3_CS1_M0/I2S1_LRCK_RX_M1/GPIO4_A7_D, 1N2 CIF_D14/EBC_SDDO14/GMAC1_TXD0_M1/UART9_TX_M2/I2S2_LRCK_TX_M1/GPIO4_A4_D, 1P2 CIF_D11/EBC_SDDO11/GMAC1_RXD2_M1/PDM_SDI1_M1/GPIO4_A1_D, 1R1 CIF_D12/EBC_SDDO12/GMAC1_RXD3_M1/UART7_TX_M2/PDM_SDI2_M1/GPIO4_A2_D, 1R2 CIF_D6/EBC_SDDO6/SDMMC2_DET_M0/I2S1_SDI2_M1/VOP_BT656_D6_M1/GPIO3_D4_D, 1T1 CIF_D7/EBC_SDDO7/SDMMC2_PWREN_M0/I2S1_SDI3_M1/VOP_BT656_D7_M1/GPIO3_D5_D, 1T2 CIF_D0/EBC_SDDO0/SDMMC2_D0_M0/I2S1_MCLK_M1/VOP_BT656_D0_M1/GPIO3_C6_D, 1U1 CIF_D1/EBC_SDDO1/SDMMC2_D1_M0/I2S1_SCLK_TX_M1/VOP_BT656_D1_M1/GPIO3_C7_D, AB1 CIF_CLKIN/EBC_SDCLK/GMAC1_MCLKINOUT_M1/UART1_~{CTS}_M1/I2S2_SCLK_RX_M1/GPIO4_C1_D, AB2 CIF_CLKOUT/EBC_GDCLK/PWM11_IR_M1/GPIO4_C0_D, AC2 CIF_VSYNC/EBC_SDOE/GMAC1_MDIO_M1/I2S2_SCLK_TX_M1/GPIO4_B7_D, AD1 I2C2_SCL_M1/EBC_SDSHR/I2S1_SDO3_M1/GPIO4_B5_D, AE2 I2C4_SCL_M0/EBC_GDOE/ETH1_REFCLKO_25M_M1/SPI3_CLK_M0/I2S2_SDO_M1/GPIO4_B3_D, AF1 I2C2_SDA_M1/EBC_GDSP/ISP_FLASH_TRIGIN/VOP_BT656_CLK_M1/GPIO4_B4_D, AF2 I2C4_SDA_M0/EBC_VCOM/GMAC1_RXER_M1/SPI3_MOSI_M0/I2S2_SDI_M1/GPIO4_B2_D, AG2 ISP_PRELIGHT_TRIG/EBC_SDCE3/GMAC1_RXDV_CRS_M1/I2S1_SDO2_M1/GPIO4_B1_D, AH2 ISP_FLASHTRIGOUT/EBC_SDCE0/GMAC1_TXEN_M1/SPI3_CS0_M0/I2S1_SCLK_RX_M1/GPIO4_A6_D, AJ1 CIF_D15/EBC_SDDO15/GMAC1_TXD1_M1/UART9_RX_M2/I2S2_LRCK_RX_M1/GPIO4_A5_D, AJ2 CIF_D13/EBC_SDDO13/GMAC1_RXCLK_M1/UART7_RX_M2/PDM_SDI3_M1/GPIO4_A3_D, AK2 CIF_D10/EBC_SDDO10/GMAC1_TXCLK_M1/PDM_CLK1_M1/GPIO4_A0_D, AL1 CIF_D9/EBC_SDDO9/GMAC1_TXD3_M1/UART1_RX_M1/PDM_SDI0_M1/GPIO3_D7_D, AL2 CIF_D8/EBC_SDDO8/GMAC1_TXD2_M1/UART1_TX_M1/PDM_CLK0_M1/GPIO3_D6_D, AM1 CIF_D5/EBC_SDDO5/SDMMC2_CLK_M0/I2S1_SDI1_M1/VOP_BT656_D5_M1/GPIO3_D3_D, AM2 CIF_D4/EBC_SDDO4/SDMMC2_CMD_M0/I2S1_SDI0_M1/VOP_BT656_D4_M1/GPIO3_D2_D, AN2 CIF_D3/EBC_SDDO3/SDMMC2_D3_M0/I2S1_SDO0_M1/VOP_BT656_D3_M1/GPIO3_D1_D, AP1 CIF_D2/EBC_SDDO2/SDMMC2_D2_M0/I2S1_LRCK_TX_M1/VOP_BT656_D2_M1/GPIO3_D0_D
part N pins: 1N8 VCCIO7, 1T6 PWM13_M1/SPI3_CS0_M1/SATA0_ACT_LED/UART9_RX_M1/I2S3_SDI_M1/GPIO4_C6_D, 1U6 PWM12_M1/SPI3_MISO_M1/SATA1_ACT_LED/UART9_TX_M1/I2S3_SDO_M1/GPIO4_C5_D, 1U7 PWM14_M1/SPI3_CLK_M1/I2S3_MCLK_M1/GPIO4_C2_D, 1V5 HDMITX_CEC_M0/SPI3_CS1_M1/GPIO4_D1_U, 1V6 EDP_HPDIN_M0/SPDIF_TX_M2/SATA2_ACT_LED/I2S3_LRCK_M1/GPIO4_C4_D, AP11 HDMITX_SDA/I2C5_SDA_M1/GPIO4_D0_U, AP12 PWM15_IR_M1/SPI3_MOSI_M1/I2S3_SCLK_M1/GPIO4_C3_D, AR12 HDMITX_SCL/I2C5_SCL_M1/GPIO4_C7_U
part O pins: 1A19 SARADC_VIN3, 1B18 SARADC_VIN2, 1C17 SARADC_VIN1, 1D15 OTP_VCC18, 1D16 SARADC_AVDD_1V8, 1D17 SARADC_VIN0
part P pins: 1N9 MIPI_CSI_RX_AVDD_0V9, 1P9 MIPI_CSI_RX_AVDD_1V8, 1U8 MIPI_CSI_RX_CLK1N, 1U9 MIPI_CSI_RX_CLK0N, 1V8 MIPI_CSI_RX_CLK1P, 1V9 MIPI_CSI_RX_CLK0P, AP14 MIPI_CSI_RX_D3N, AP15 MIPI_CSI_RX_D2P, AP17 MIPI_CSI_RX_D1N, AP18 MIPI_CSI_RX_D0P, AR14 MIPI_CSI_RX_D3P, AR15 MIPI_CSI_RX_D2N, AR17 MIPI_CSI_RX_D1P, AR18 MIPI_CSI_RX_D0N
part Q pins: 1N13 HDMI_TX_AVDD_0V9_2, 1N14 HDMI_TX_AVDD_0V9_1, 1P13 HDMI_TX_AVDD_1V8, 1U16 HDMI_TX_REXT, 1V17 HDMI_TX_HPDIN, AP32 HDMI_TX_CLKN, AP33 HDMI_TX_D0P, AP35 HDMI_TX_D1N, AP36 HDMI_TX_D2P, AR32 HDMI_TX_CLKP, AR33 HDMI_TX_D0N, AR35 HDMI_TX_D1P, AR36 HDMI_TX_D2N
part R pins: 1P11 MIPI_DSI_TX0/LVDS_TX0_AVDD_0V9, 1P12 MIPI_DSI_TX0/LVDS_TX0_AVDD_1V8, 1V15 MIPI_DSI_TX0_CLKN/LVDS_TX0_CLKN, 1V16 MIPI_DSI_TX0_CLKP/LVDS_TX0_CLKP, AP26 MIPI_DSI_TX0_D3N/LVDS_TX0_D3N, AP27 MIPI_DSI_TX0_D2P/LVDS_TX0_D2P, AP29 MIPI_DSI_TX0_D1N/LVDS_TX0_D1N, AP30 MIPI_DSI_TX0_D0P/LVDS_TX0_D0P, AR26 MIPI_DSI_TX0_D3P/LVDS_TX0_D3P, AR27 MIPI_DSI_TX0_D2N/LVDS_TX0_D2N, AR29 MIPI_DSI_TX0_D1P/LVDS_TX0_D1P, AR30 MIPI_DSI_TX0_D0N/LVDS_TX0_D0N
part S pins: 1N10 MIPI_DSI_TX1_AVDD_0V9, 1R10 MIPI_DSI_TX1_AVDD_1V8, 1U11 MIPI_DSI_TX1_CLKN, 1V11 MIPI_DSI_TX1_CLKP, AP20 MIPI_DSI_TX1_D3N, AP21 MIPI_DSI_TX1_D2P, AP23 MIPI_DSI_TX1_D1N, AP24 MIPI_DSI_TX1_D0P, AR20 MIPI_DSI_TX1_D3P, AR21 MIPI_DSI_TX1_D2N, AR23 MIPI_DSI_TX1_D1P, AR24 MIPI_DSI_TX1_D0N
part T pins: 1G17 EDP_TX_AVDD_1V8, 1H17 EDP_TX_AVDD_0V9, 1H19 EDP_TX_AUXP, 1H20 EDP_TX_AUXN, J37 EDP_TX_D0P, J38 EDP_TX_D0N, K37 EDP_TX_D1N, K38 EDP_TX_D1P, M37 EDP_TX_D2P, M38 EDP_TX_D2N, N37 EDP_TX_D3P, N38 EDP_TX_D3N
part U pins: 1H16 USB_AVDD1_1V8, 1H18 USB_AVDD1_3V3, 1J17 USB_AVDD1_0V9, 1J19 USB_HOST1_DP, 1J20 USB_HOST1_DM, 1K16 MULTI_PHY_AVDD_0V9, 1K17 MULTI_PHY_AVDD_1V8, 1K19 PCIE20_REFCLKP, 1K20 PCIE20_REFCLKN, AA37 PCIE20_TXP/SATA2_TXP, AA38 PCIE20_TXN/SATA2_TXN, AB37 PCIE20_RXP/SATA2_RXP, AB38 PCIE20_RXN/SATA2_RXN, R37 USB_OTG0_DP, R38 USB_OTG0_DM, T37 USB_OTG0_ID, T38 USB_OTG0_VBUSDET, V37 USB3_HOST1_SSRXN/SATA1_RXN, V38 USB3_HOST1_SSRXP/SATA1_RXP, W37 USB3_HOST1_SSTXP/SATA1_TXP, W38 USB3_HOST1_SSTXN/SATA1_TXN
part V pins: 1J2 USB_AVDD2_3V3, 1J3 USB_AVDD2_1V8, 1J4 USB_AVDD2_0V9, V1 USB_HOST2_DM, V2 USB_HOST2_DP, Y1 USB_HOST3_DM, Y2 USB_HOST3_DP
part F text: DDR4; LPDDR4; DDR3; LPDDR3; Note:  Sequences can not be swap.; VDDQ /; VDDQL /; 1.35V / 1.50V / 1.20V / 1.20V / 1.10V; DDR3L / DDR3 / DDR4 / LPDDR3 / LPDDR4 / LPDDR4x /; 1.35V / 1.50V / 1.20V / 1.20V / 1.10V / 1.10V; 0.60V; Note: / Except DDR3, other DQ sequences / can not be swap
part G text: OSC; PMUIO1 Domain; Operating Voltage = 3.3V Only; Operating / Voltage=1.8V Only / (PMUPLL_AVDD_1V8); PMU PLL; PMUIO2 Domain; Operating Voltage = 1.8V/3.3V; SYS PLL; PMUIO1/2/OSC Domain Logic Power; Operating Voltage = 0.9V
part H text: VCCIO1 Domain; Operating Voltage = 1.8V/3.3V
part I text: VCCIO2 Domain; Operating Voltage = 1.8V/3.3V; Default is determined by Pin; FLASH_VOL_SEL/GPIO0_A7_u:; L:VCCIO2 must supply 3.3V; H:VCCIO2 must supply 1.8V
part J text: VCCIO3 Domain; Operating Voltage = 1.8V/3.3V
part K text: VCCIO4 Domain; Operating Voltage = 1.8V/3.3V
part L text: VCCIO5 Domain; Operating Voltage = 1.8V/3.3V
part M text: VCCIO6 Domain; Operating Voltage = 1.8V/3.3V
part N text: VCCIO7 Domain; Operating Voltage = 1.8V/3.3V
part O text: SARADC; Recovery /; OTP
part P text: MIPI  CSI  RX
part Q text: HDMI2.0  TX
part R text: MIPI  DSI  TX0/LVDS  TX0
part S text: MIPI  DSI  TX1
part T text: eDP_TX
part U text: USB2.0 OTG_0; HS/FS/LS; (Download Port); USB2.0 HOST_1; (DP/DM for USB3.0 HOST); USB2.0 Power; (for OTG_0 and HOST_1); MULTI PHY U_S; (SS for USB3.0 HOST or SATA3_1); MULTI PHY P_S; (PCIE2.0 or SATA3_2); MULTI PHY Power; (for MULTI PHY U_S and P_S)
part V text: USB2.0; (for HOST_2 and HOST_3)

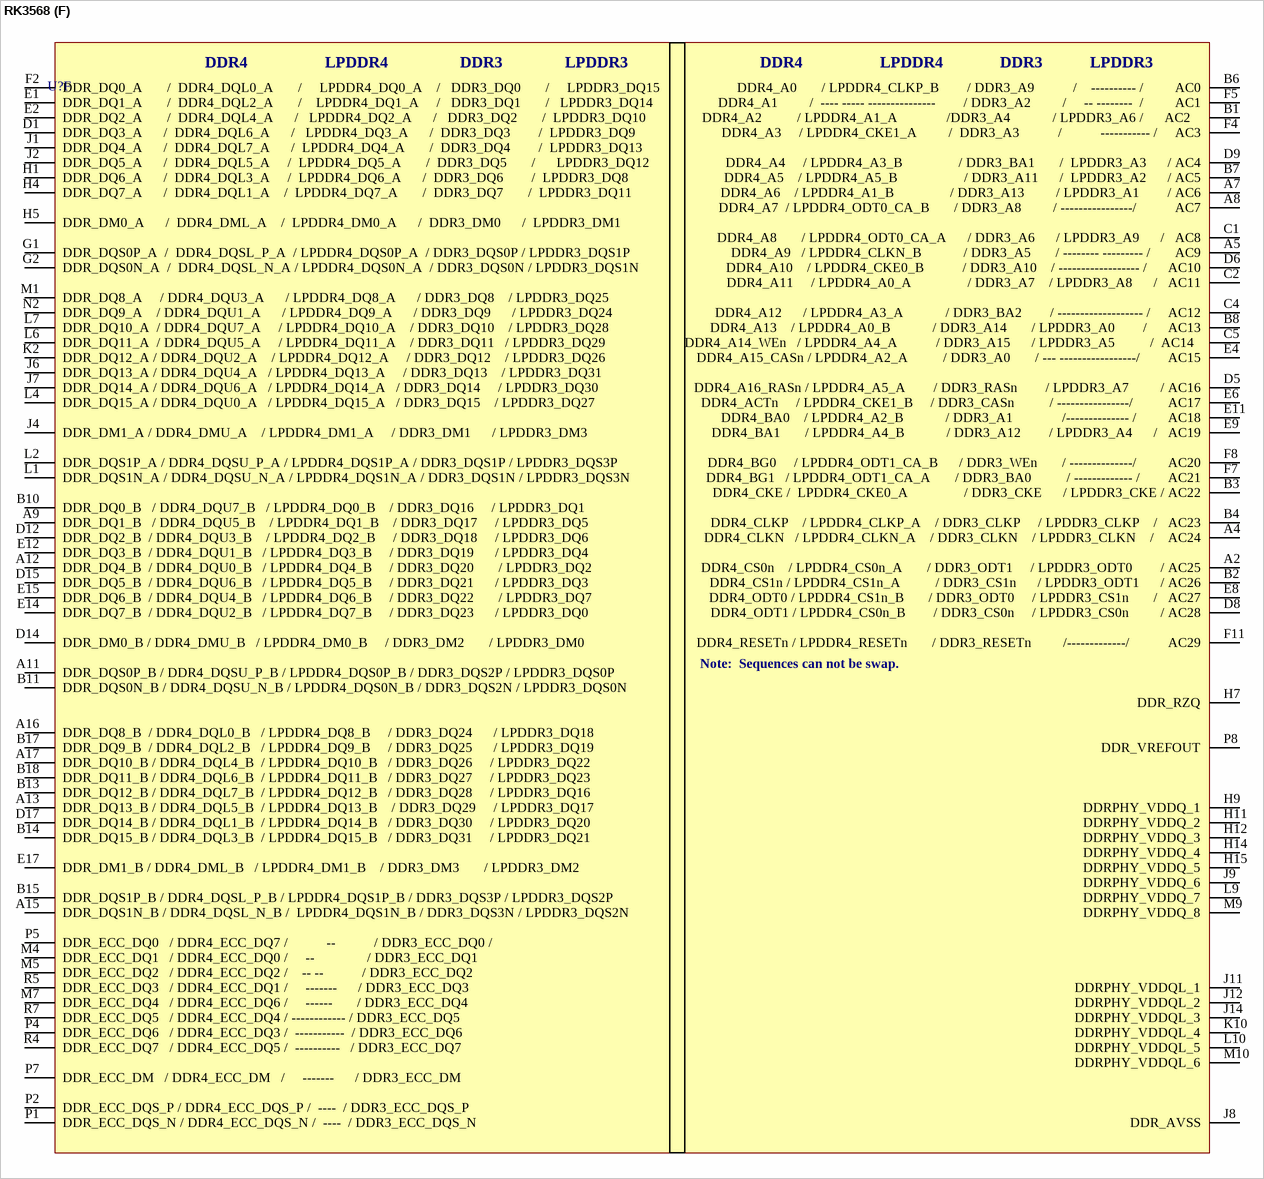
[diagram p10: symbol RK3568]

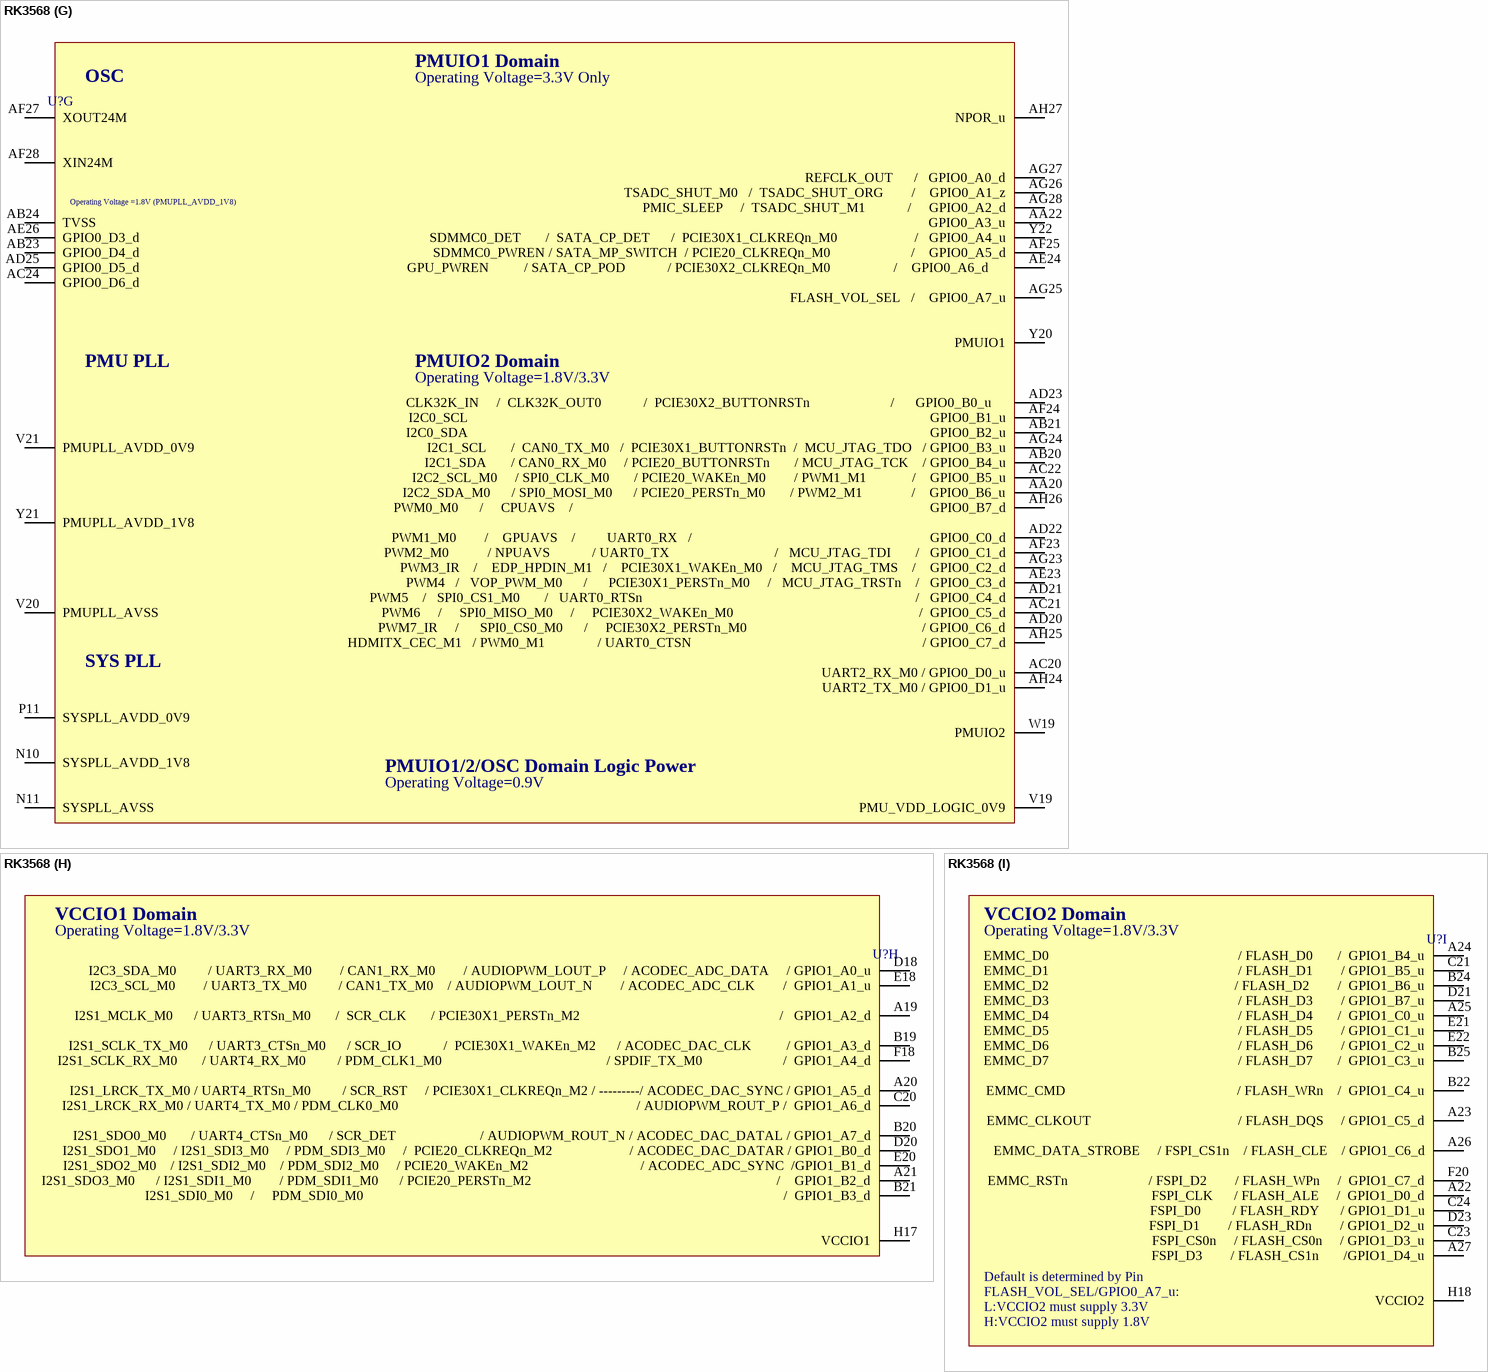
[diagram p11: symbol RK3568]

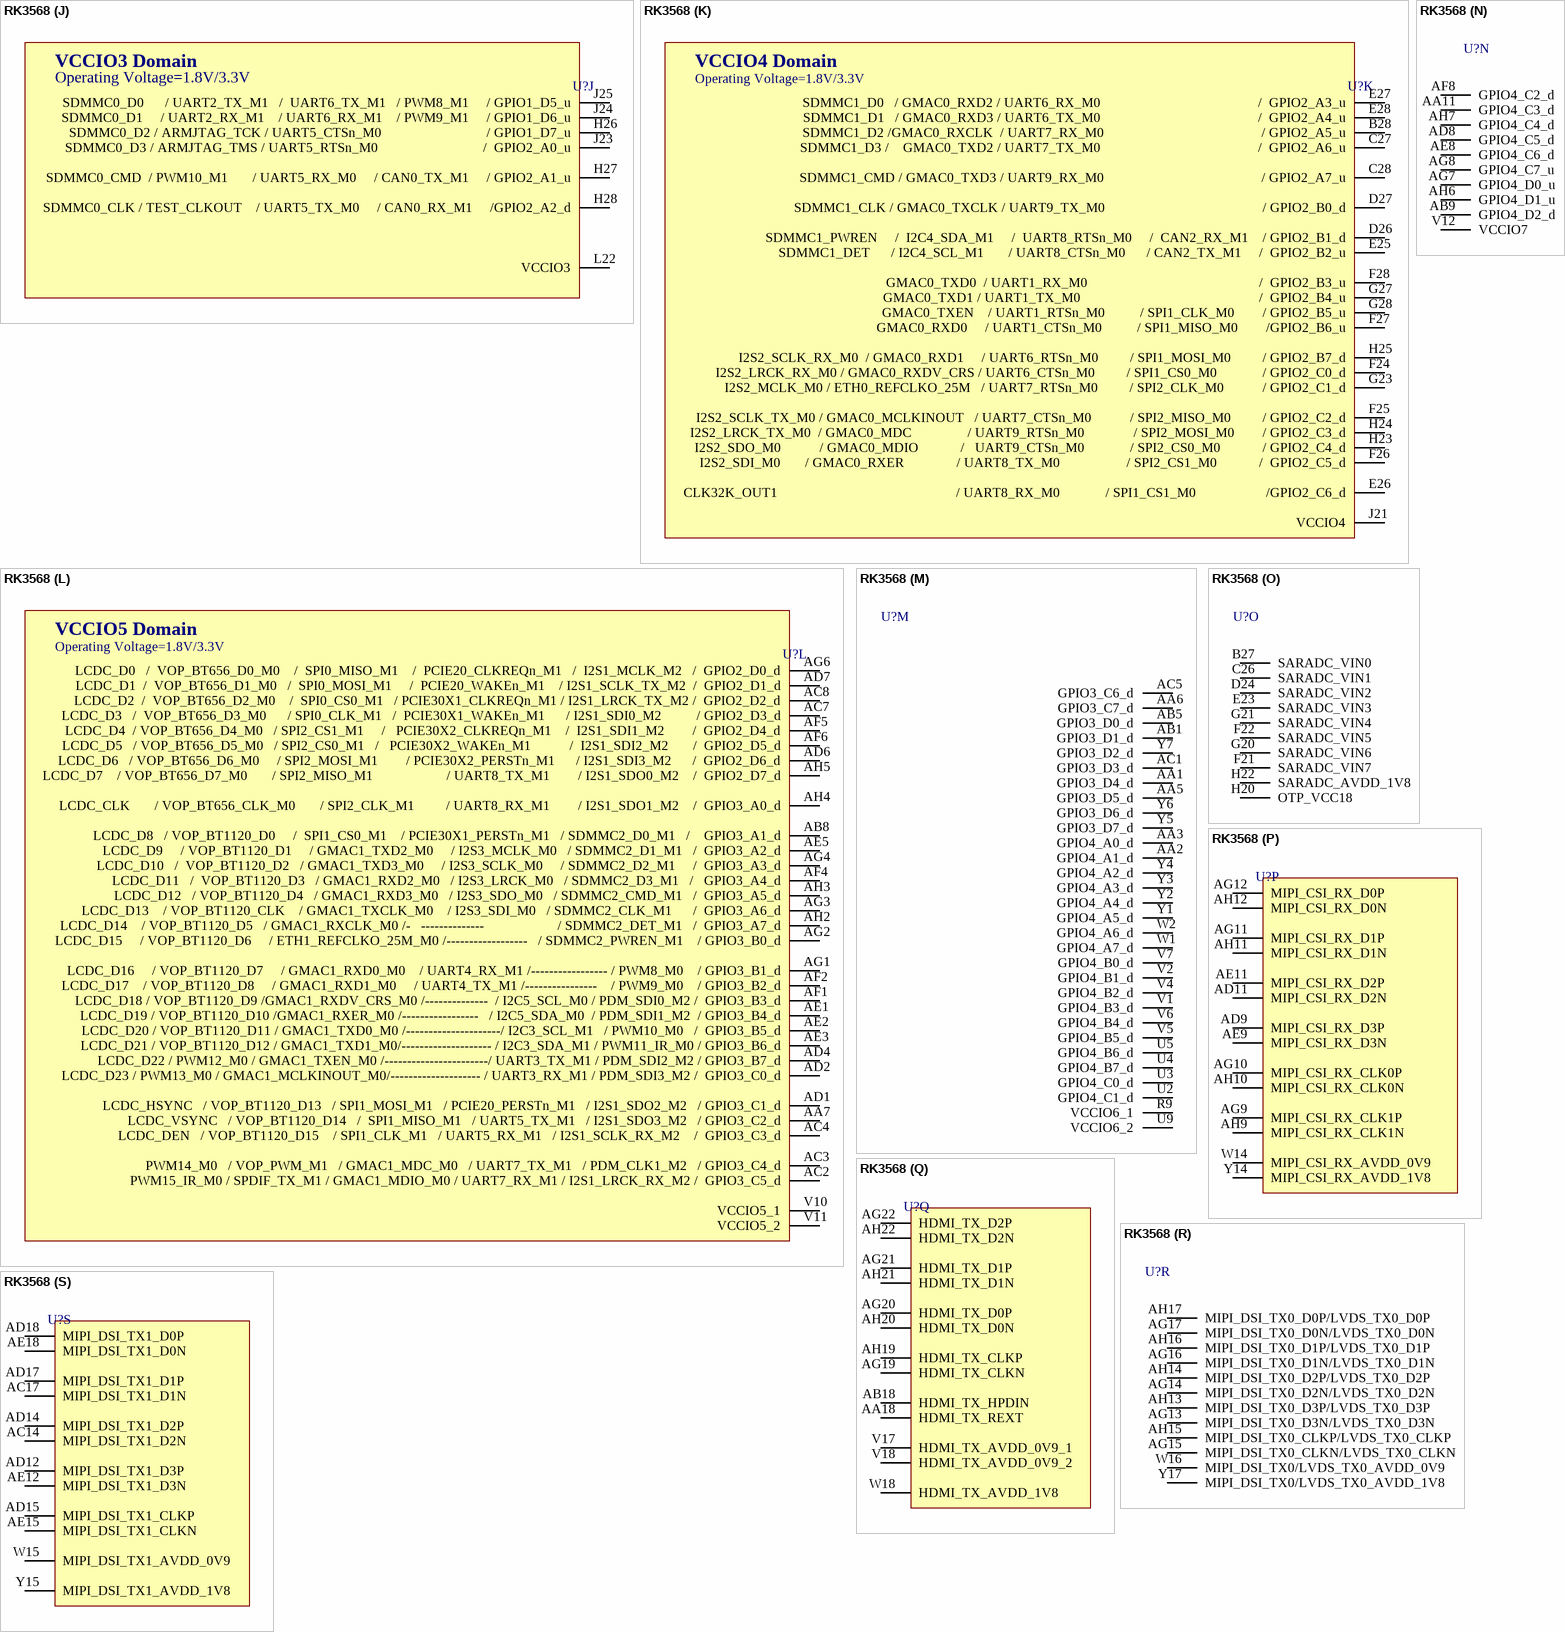
[diagram p12: symbol RK3568]

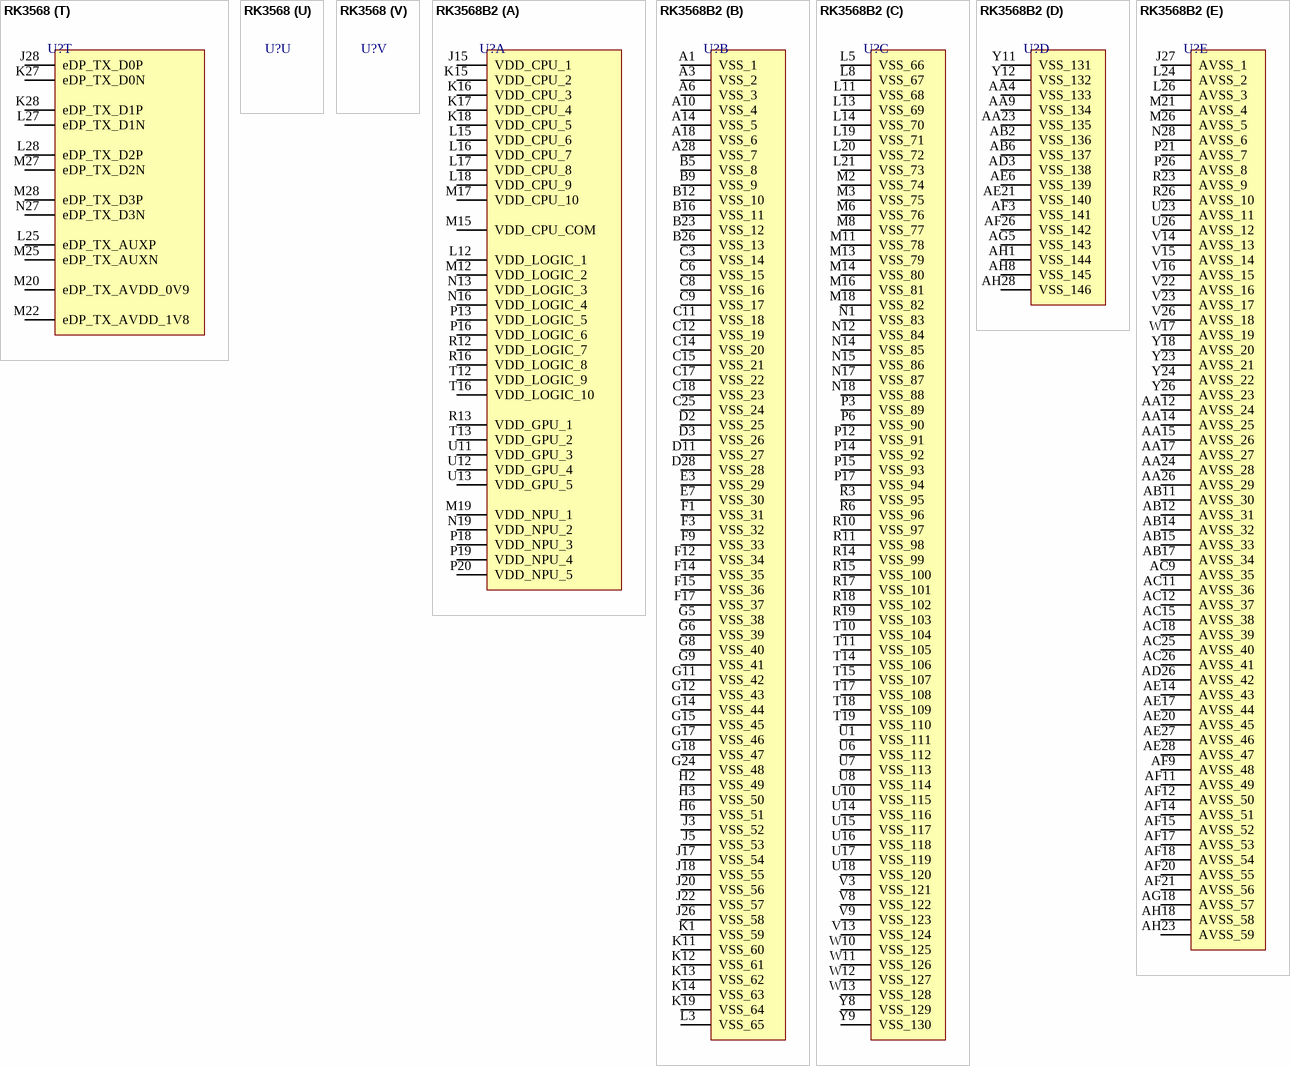
[diagram p13: symbols RK3568 to RK3568B2]